# Altium integrated library conn 2.54mm.IntLib: 396 symbols (part 2 of 3)
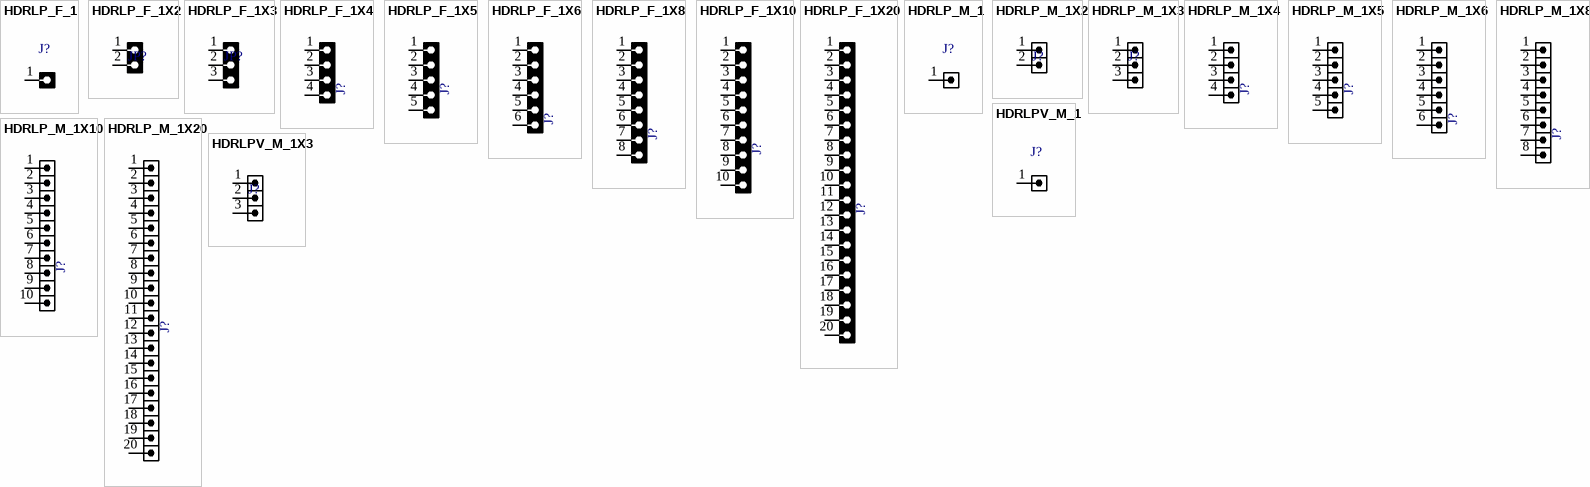
[diagram p13: symbols HDRLP_F_1 to HDRLPV_M_1X3]

## HDRLPV_M_1X3
designator J?, comment HDRM3  (value not drawn)
CONN, HEADER, VeryLowProfile, Male, pitch: 2.54mm, 3POS; VALUE: HDRM3
signal-integrity model Connector
footprint HDRLPV_M_1X3 (Connector Socket with header, Single-row 3-position, 0.100" pitch)
pins: 1, 2, 3


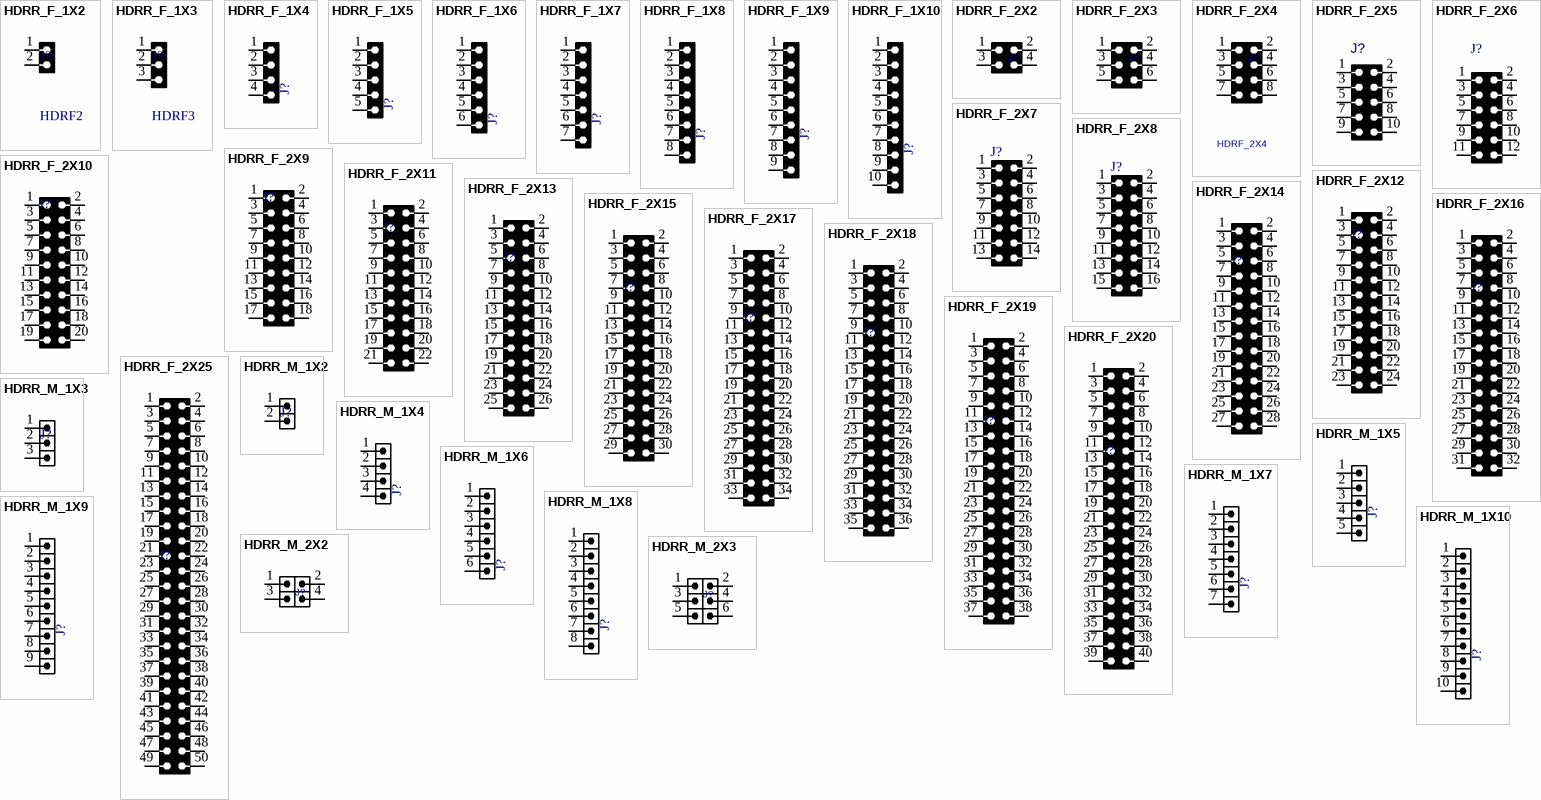
[diagram p5: symbols HDRR_F_1X2 to HDRR_M_2X3]

## HDRR_F_1X2
designator J?, comment HDRF2
CONN, HEADER, Female, pitch: 2.54mm, 2POS; VALUE: HDRF2
footprint HDRR_F_1X2 (Connector; Header; 2 Position; Right Angle)
pins: 1, 2

## HDRR_F_1X3
designator J?, comment HDRF3
CONN, HEADER, Female, pitch: 2.54mm, 3POS; VALUE: HDRF3
footprint HDRR_F_1X3 (Connector; Header; 3 Position; Right Angle)
pins: 1, 2, 3

## HDRR_F_1X4
designator J?, comment HDRF4  (value not drawn)
CONN, HEADER, Female, pitch: 2.54mm, 4POS; VALUE: HDRF4
footprint HDRR_F_1X4 (Connector; Header; 4 Position; Right Angle)
pins: 1, 2, 3, 4

## HDRR_F_1X5
designator J?, comment HDRF5  (value not drawn)
CONN, HEADER, Female, pitch: 2.54mm, 5POS; VALUE: HDRF5
footprint HDRR_F_1X5 (Connector; Header; 5 Position)
pins: 1, 2, 3, 4, 5

## HDRR_F_1X6
designator J?, comment HDRF6  (value not drawn)
CONN, HEADER, Female, pitch: 2.54mm, 6POS; VALUE: HDRF6
footprint HDRR_F_1X6 (Connector; Header; 6 Position)
pins: 1, 2, 3, 4, 5, 6

## HDRR_F_1X7
designator J?, comment HDRF7  (value not drawn)
CONN, HEADER, Female, pitch: 2.54mm, 7POS; VALUE: HDRF7
footprint HDRR_F_1X7 (Connector; Header; 7 Position)
pins: 1, 2, 3, 4, 5, 6, 7

## HDRR_F_1X8
designator J?, comment HDRF8  (value not drawn)
CONN, HEADER, Female, pitch: 2.54mm, 8POS; VALUE: HDRF8
footprint HDRR_F_1X8 (Connector; Header; 8 Position)
pins: 1, 2, 3, 4, 5, 6, 7, 8

## HDRR_F_1X9
designator J?, comment HDRF9  (value not drawn)
CONN, HEADER, Female, pitch: 2.54mm, 9POS; VALUE: HDRF9
footprint HDRR_F_1X9 (Connector; Header; 9 Position)
pins: 1, 2, 3, 4, 5, 6, 7, 8, 9

## HDRR_F_1X10
designator J?, comment HDRF10  (value not drawn)
CONN, HEADER, Female, pitch: 2.54mm, 10POS; VALUE: HDRF10
footprint HDRR_F_1X10 (Connector; Header; 10 Position)
pins: 1, 2, 3, 4, 5, 6, 7, 8, 9, 10

## HDRR_F_2X2
designator J?, comment HDRF_2X2  (value not drawn)
CONN, HEADER, RightAngle, Female, pitch: 2.54mm, 4POS; MANF_P#: MANF_PART#; MANF: MANF; VALUE: HDRF_2X2
footprint HDRR_F_2X2 (Connector; Header; 2x2 Position)
pins: 1, 2, 3, 4

## HDRR_F_2X3
designator J?, comment HDRF_2X3  (value not drawn)
CONN, HEADER, RightAngle, Female, pitch: 2.54mm, 6POS; MANF_P#: MANF_PART#; MANF: MANF; VALUE: HDRF_2X3
footprint HDRR_F_2X3 (Connector; Header; 3x2 Position)
pins: 1, 2, 3, 4, 5, 6

## HDRR_F_2X4
designator J?, comment HDRF_2X4
CONN, HEADER, RightAngle, Female, pitch: 2.54mm, 8POS; MANF_P#: MANF_PART#; MANF: MANF; VALUE: HDRF_2X4
footprint HDRR_F_2X4 (Connector; Header; 4x2 Position)
pins: 1, 2, 3, 4, 5, 6, 7, 8

## HDRR_F_2X5
designator J?, comment HDRF_2X5  (value not drawn)
CONN, HEADER, RightAngle, Female, pitch: 2.54mm, 10POS; VALUE: HDRF_2X5
footprint HDRR_F_2X5 (Connector; Header; 5x2 Position)
pins: 1, 2, 3, 4, 5, 6, 7, 8, 9, 10

## HDRR_F_2X6
designator J?, comment HDRF_2X7  (value not drawn)
CONN, HEADER, RightAngle, Female, pitch: 2.54mm, 14POS; VALUE: HDRF_2X7
footprint HDRR_F_2X7 (Connector; Header; 7x2 Position)
pins: 1, 2, 3, 4, 5, 6, 7, 8, 9, 10, 11, 12

## HDRR_F_2X7
designator J?, comment HDRF_2X7  (value not drawn)
CONN, HEADER, RightAngle, Female, pitch: 2.54mm, 14POS; VALUE: HDRF_2X7
footprint HDRR_F_2X7 (Connector; Header; 7x2 Position)
pins: 1, 2, 3, 4, 5, 6, 7, 8, 9, 10, 11, 12, 13, 14

## HDRR_F_2X8
designator J?, comment HDRF_2X8  (value not drawn)
CONN, HEADER, RightAngle, Female, pitch: 2.54mm, 16POS; VALUE: HDRF_2X8
footprint HDRR_F_2X8 (Connector; Header; 8x2 Position)
pins: 1, 2, 3, 4, 5, 6, 7, 8, 9, 10, 11, 12, 13, 14, 15, 16

## HDRR_F_2X9
designator J?, comment HDRF_2X9  (value not drawn)
CONN, HEADER, RightAngle, Female, pitch: 2.54mm, 18POS; VALUE: HDRF_2X9
footprint HDRR_F_2X9 (Connector; Header; 9x2 Position)
pins: 1, 2, 3, 4, 5, 6, 7, 8, 9, 10, 11, 12, 13, 14, 15, 16, 17, 18

## HDRR_F_2X10
designator J?, comment HDRF_2X10  (value not drawn)
CONN, HEADER, RightAngle, Female, pitch: 2.54mm, 20POS; VALUE: HDRF_2X10
footprint HDRR_F_2X10 (Connector; Header; 10x2 Position)
pins: 1, 2, 3, 4, 5, 6, 7, 8, 9, 10, 11, 12, 13, 14, 15, 16, 17, 18, 19, 20

## HDRR_F_2X11
designator J?, comment HDRF_2X11  (value not drawn)
CONN, HEADER, RightAngle, Female, pitch: 2.54mm, 22POS; VALUE: HDRF_2X11
footprint HDRR_F_2X11 (Connector; Header; 11x2 Position)
pins: 1, 2, 3, 4, 5, 6, 7, 8, 9, 10, 11, 12, 13, 14, 15, 16, 17, 18, 19, 20, 21, 22

## HDRR_F_2X12
designator J?, comment HDRF_2X12  (value not drawn)
CONN, HEADER, RightAngle, Female, pitch: 2.54mm, 24POS; VALUE: HDRF_2X12
footprint HDRR_F_2X12 (Connector; Header; 12x2 Position)
pins: 1, 2, 3, 4, 5, 6, 7, 8, 9, 10, 11, 12, 13, 14, 15, 16, 17, 18, 19, 20, 21, 22, 23, 24

## HDRR_F_2X13
designator J?, comment HDRF_2X13  (value not drawn)
CONN, HEADER, RightAngle, Female, pitch: 2.54mm, 26POS; VALUE: HDRF_2X13
footprint HDRR_F_2X13 (Connector; Header; 13x2 Position)
pins: 1, 2, 3, 4, 5, 6, 7, 8, 9, 10, 11, 12, 13, 14, 15, 16, 17, 18, 19, 20, 21, 22, 23, 24, 25, 26

## HDRR_F_2X14
designator J?, comment HDRF_2X14  (value not drawn)
CONN, HEADER, RightAngle, Female, pitch: 2.54mm, 28POS; VALUE: HDRF_2X14
footprint HDRR_F_2X14 (Connector; Header; 14x2 Position)
pins: 1, 2, 3, 4, 5, 6, 7, 8, 9, 10, 11, 12, 13, 14, 15, 16, 17, 18, 19, 20, 21, 22, 23, 24, 25, 26, 27, 28

## HDRR_F_2X15
designator J?, comment HDRF_2X15  (value not drawn)
CONN, HEADER, RightAngle, Female, pitch: 2.54mm, 30POS; VALUE: HDRF_2X15
footprint HDRR_F_2X15 (Connector; Header; 15x2 Position)
pins: 1, 2, 3, 4, 5, 6, 7, 8, 9, 10, 11, 12, 13, 14, 15, 16, 17, 18, 19, 20, 21, 22, 23, 24, 25, 26, 27, 28, 29, 30

## HDRR_F_2X16
designator J?, comment HDRF_2X16  (value not drawn)
CONN, HEADER, RightAngle, Female, pitch: 2.54mm, 32POS; VALUE: HDRF_2X16
footprint HDRR_F_2X16 (Connector; Header; 16x2 Position)
pins: 1, 2, 3, 4, 5, 6, 7, 8, 9, 10, 11, 12, 13, 14, 15, 16, 17, 18, 19, 20, 21, 22, 23, 24, 25, 26, 27, 28, 29, 30, 31, 32

## HDRR_F_2X17
designator J?, comment HDRF_2X17  (value not drawn)
CONN, HEADER, RightAngle, Female, pitch: 2.54mm, 34POS; VALUE: HDRF_2X17
footprint HDRR_F_2X17 (Connector; Header; 17x2 Position)
pins: 1, 2, 3, 4, 5, 6, 7, 8, 9, 10, 11, 12, 13, 14, 15, 16, 17, 18, 19, 20, 21, 22, 23, 24, 25, 26, 27, 28, 29, 30, 31, 32, 33, 34

## HDRR_F_2X18
designator J?, comment HDRF_2X18  (value not drawn)
CONN, HEADER, RightAngle, Female, pitch: 2.54mm, 36POS; VALUE: HDRF_2X18
footprint HDRR_F_2X18 (Connector; Header; 18x2 Position)
pins: 1, 2, 3, 4, 5, 6, 7, 8, 9, 10, 11, 12, 13, 14, 15, 16, 17, 18, 19, 20, 21, 22, 23, 24, 25, 26, 27, 28, 29, 30, 31, 32, 33, 34, 35, 36

## HDRR_F_2X19
designator J?, comment HDRF_2X19  (value not drawn)
CONN, HEADER, RightAngle, Female, pitch: 2.54mm, 38POS; VALUE: HDRF_2X19
footprint HDRR_F_2X19 (Connector; Header; 19x2 Position)
pins: 1, 2, 3, 4, 5, 6, 7, 8, 9, 10, 11, 12, 13, 14, 15, 16, 17, 18, 19, 20, 21, 22, 23, 24, 25, 26, 27, 28, 29, 30, 31, 32, 33, 34, 35, 36, 37, 38

## HDRR_F_2X20
designator J?, comment HDRF_2X20  (value not drawn)
CONN, HEADER, RightAngle, Female, pitch: 2.54mm, 40POS; VALUE: HDRF_2X20
footprint HDRR_F_2X20 (Connector; Header; 20x2 Position)
pins: 1, 2, 3, 4, 5, 6, 7, 8, 9, 10, 11, 12, 13, 14, 15, 16, 17, 18, 19, 20, 21, 22, 23, 24, 25, 26, 27, 28, 29, 30, 31, 32, 33, 34, 35, 36, 37, 38, 39, 40

## HDRR_F_2X25
designator J?, comment HDRF_2X25  (value not drawn)
CONN, HEADER, Female, pitch: 2.54mm, 50POS; VALUE: HDRF_2X25
footprint HDRR_F_2X25 (Connector; Header; 25x2 Position)
pins: 1, 2, 3, 4, 5, 6, 7, 8, 9, 10, 11, 12, 13, 14, 15, 16, 17, 18, 19, 20, 21, 22, 23, 24, 25, 26, 27, 28, 29, 30, 31, 32, 33, 34, 35, 36, 37, 38, 39, 40, 41, 42, 43, 44, 45, 46, 47, 48, 49, 50

## HDRR_M_1X2
designator J?, comment HDRM2  (value not drawn)
CONN, HEADER, RightAngle, Male, pitch: 2.54mm, 2POS; VALUE: HDRM2
footprint HDRR_M_1X2 (Connector; Header; 2 Position; Right Angle)
pins: 1, 2

## HDRR_M_1X3
designator J?, comment HDRM3  (value not drawn)
CONN, HEADER, RightAngle, Male, pitch: 2.54mm, 3POS; VALUE: HDRM3
footprint HDRR_M_1X3 (Connector; Header; 3 Position; Right Angle)
pins: 1, 2, 3

## HDRR_M_1X4
designator J?, comment HDR1X4  (value not drawn)
CONN, HEADER, RightAngle, Male, pitch: 2.54mm, 4POS; VALUE: HDRM4
footprint HDRR_M_1X4 (Connector; Header; 4 Position; Right Angle)
pins: 1, 2, 3, 4

## HDRR_M_1X5
designator J?, comment HDR1X5  (value not drawn)
CONN, HEADER, RightAngle, Male, pitch: 2.54mm, 5POS; VALUE: HDRM5
footprint HDRR_M_1X5 (Footprint not found)
pins: 1, 2, 3, 4, 5

## HDRR_M_1X6
designator J?, comment HDR1X6  (value not drawn)
CONN, HEADER, RightAngle, Male, pitch: 2.54mm, 6POS; VALUE: HDRM6
footprint HDRR_M_1X6 (Footprint not found)
pins: 1, 2, 3, 4, 5, 6

## HDRR_M_1X7
designator J?, comment HDR1X7  (value not drawn)
CONN, HEADER, RightAngle, Male, pitch: 2.54mm, 7POS; VALUE: HDRM7
footprint HDRR_M_1X7 (Footprint not found)
pins: 1, 2, 3, 4, 5, 6, 7

## HDRR_M_1X8
designator J?, comment HDR1X8  (value not drawn)
CONN, HEADER, RightAngle, Male, pitch: 2.54mm, 8POS; VALUE: HDRM8
footprint HDRR_M_1X8 (Footprint not found)
pins: 1, 2, 3, 4, 5, 6, 7, 8

## HDRR_M_1X9
designator J?, comment HDR1X9  (value not drawn)
CONN, HEADER, RightAngle, Male, pitch: 2.54mm, 9POS; VALUE: HDRM9
footprint HDRR_M_1X9 (Footprint not found)
pins: 1, 2, 3, 4, 5, 6, 7, 8, 9

## HDRR_M_1X10
designator J?, comment HDR1X10  (value not drawn)
CONN, HEADER, RightAngle, Male, pitch: 2.54mm, 10POS; VALUE: HDRM10
footprint HDRR_M_1X10 (Footprint not found)
pins: 1, 2, 3, 4, 5, 6, 7, 8, 9, 10

## HDRR_M_2X2
designator J?, comment HDRM_2X2  (value not drawn)
CONN, HEADER, RightAngle, Male, pitch: 2.54mm, 4POS; MANF_P#: MANF_PART#; MANF: MANF; VALUE: HDRM_2X2
footprint HDRR_M_2X2 (Connector; Header; 2x2 Position)
pins: 1, 2, 3, 4

## HDRR_M_2X3
designator J?, comment HDRM_2X3  (value not drawn)
CONN, HEADER, RightAngle, Male, pitch: 2.54mm, 6POS; MANF_P#: MANF_PART#; MANF: MANF; VALUE: HDRM_2X3
footprint HDRR_M_2X3 (Connector; Header; 3x2 Position)
pins: 1, 2, 3, 4, 5, 6

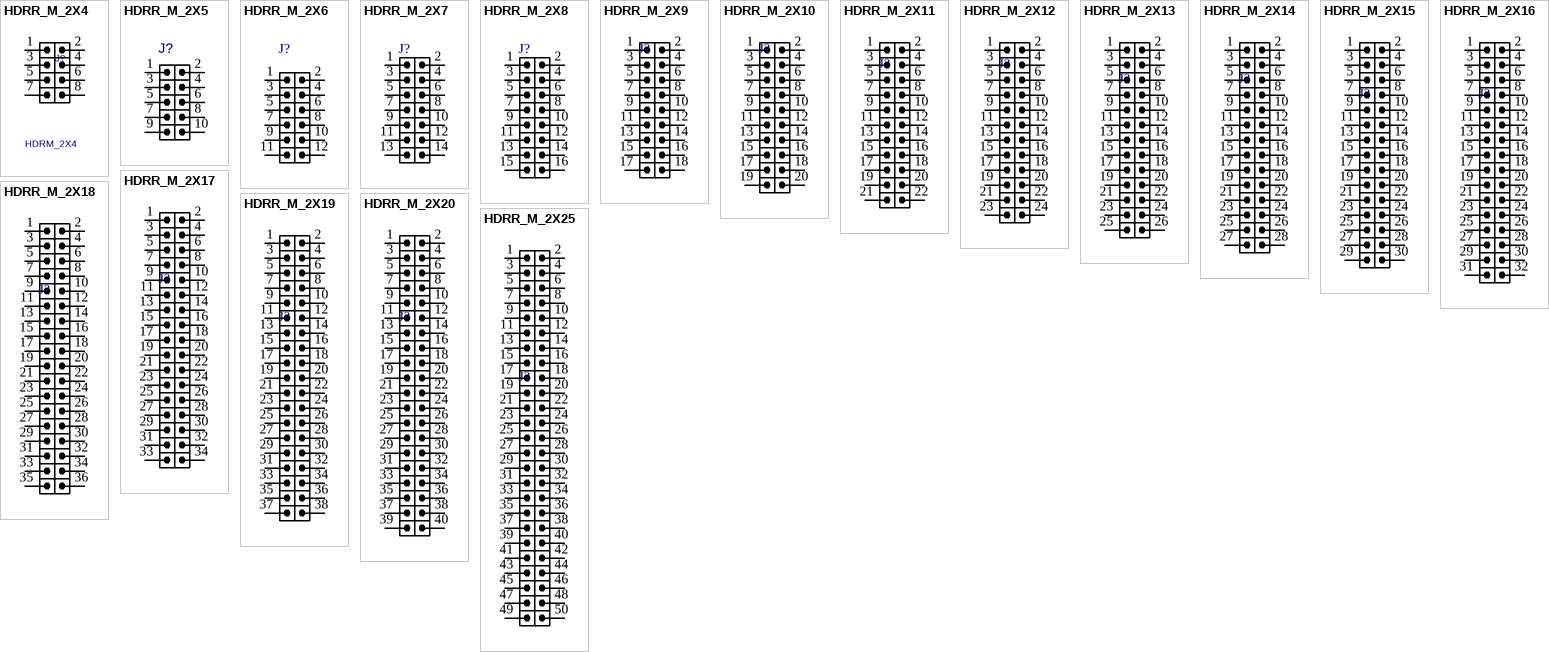
[diagram p6: symbols HDRR_M_2X4 to HDRR_M_2X25]

## HDRR_M_2X4
designator J?, comment HDRM_2X4
CONN, HEADER, RightAngle, Male, pitch: 2.54mm, 8POS; MANF_P#: MANF_PART#; MANF: MANF; VALUE: HDRM_2X4
footprint HDRR_M_2X4 (Connector; Header; 4x2 Position)
pins: 1, 2, 3, 4, 5, 6, 7, 8

## HDRR_M_2X5
designator J?, comment HDRM_2X5  (value not drawn)
CONN, HEADER, RightAngle, Male, pitch: 2.54mm, 10POS; VALUE: HDRM_2X5
footprint HDRR_M_2X5 (Connector; Header; 5x2 Position)
pins: 1, 2, 3, 4, 5, 6, 7, 8, 9, 10

## HDRR_M_2X6
designator J?, comment HDRM_2X7  (value not drawn)
CONN, HEADER, RightAngle, Male, pitch: 2.54mm, 14POS; VALUE: HDRM_2X7
footprint HDRR_M_2X7 (Connector; Header; 7x2 Position)
pins: 1, 2, 3, 4, 5, 6, 7, 8, 9, 10, 11, 12

## HDRR_M_2X7
designator J?, comment HDRM_2X7  (value not drawn)
CONN, HEADER, RightAngle, Male, pitch: 2.54mm, 14POS; VALUE: HDRM_2X7
footprint HDRR_M_2X7 (Connector; Header; 7x2 Position)
pins: 1, 2, 3, 4, 5, 6, 7, 8, 9, 10, 11, 12, 13, 14

## HDRR_M_2X8
designator J?, comment HDRM_2X8  (value not drawn)
CONN, HEADER, RightAngle, Male, pitch: 2.54mm, 16POS; VALUE: HDRM_2X8
footprint HDRR_M_2X8 (Connector; Header; 8x2 Position)
pins: 1, 2, 3, 4, 5, 6, 7, 8, 9, 10, 11, 12, 13, 14, 15, 16

## HDRR_M_2X9
designator J?, comment HDRM_2X9  (value not drawn)
CONN, HEADER, RightAngle, Male, pitch: 2.54mm, 18POS; VALUE: HDRM_2X9
footprint HDRR_M_2X9 (Connector; Header; 9x2 Position)
pins: 1, 2, 3, 4, 5, 6, 7, 8, 9, 10, 11, 12, 13, 14, 15, 16, 17, 18

## HDRR_M_2X10
designator J?, comment HDRM_2X10  (value not drawn)
CONN, HEADER, RightAngle, Male, pitch: 2.54mm, 20POS; VALUE: HDRM_2X10
footprint HDRR_M_2X10 (Connector; Header; 10x2 Position)
pins: 1, 2, 3, 4, 5, 6, 7, 8, 9, 10, 11, 12, 13, 14, 15, 16, 17, 18, 19, 20

## HDRR_M_2X11
designator J?, comment HDRM_2X11  (value not drawn)
CONN, HEADER, RightAngle, Male, pitch: 2.54mm, 22POS; VALUE: HDRM_2X11
footprint HDRR_M_2X11 (Connector; Header; 11x2 Position)
pins: 1, 2, 3, 4, 5, 6, 7, 8, 9, 10, 11, 12, 13, 14, 15, 16, 17, 18, 19, 20, 21, 22

## HDRR_M_2X12
designator J?, comment HDRM_2X12  (value not drawn)
CONN, HEADER, RightAngle, Male, pitch: 2.54mm, 24POS; VALUE: HDRM_2X12
footprint HDRR_M_2X12 (Connector; Header; 12x2 Position)
pins: 1, 2, 3, 4, 5, 6, 7, 8, 9, 10, 11, 12, 13, 14, 15, 16, 17, 18, 19, 20, 21, 22, 23, 24

## HDRR_M_2X13
designator J?, comment HDRM_2X13  (value not drawn)
CONN, HEADER, RightAngle, Male, pitch: 2.54mm, 26POS; VALUE: HDRM_2X13
footprint HDRR_M_2X13 (Connector; Header; 13x2 Position)
pins: 1, 2, 3, 4, 5, 6, 7, 8, 9, 10, 11, 12, 13, 14, 15, 16, 17, 18, 19, 20, 21, 22, 23, 24, 25, 26

## HDRR_M_2X14
designator J?, comment HDRM_2X14  (value not drawn)
CONN, HEADER, RightAngle, Male, pitch: 2.54mm, 28POS; VALUE: HDRM_2X14
footprint HDRR_M_2X14 (Connector; Header; 14x2 Position)
pins: 1, 2, 3, 4, 5, 6, 7, 8, 9, 10, 11, 12, 13, 14, 15, 16, 17, 18, 19, 20, 21, 22, 23, 24, 25, 26, 27, 28

## HDRR_M_2X15
designator J?, comment HDRM_2X15  (value not drawn)
CONN, HEADER, RightAngle, Male, pitch: 2.54mm, 30POS; VALUE: HDRM_2X15
footprint HDRR_M_2X15 (Connector; Header; 15x2 Position)
pins: 1, 2, 3, 4, 5, 6, 7, 8, 9, 10, 11, 12, 13, 14, 15, 16, 17, 18, 19, 20, 21, 22, 23, 24, 25, 26, 27, 28, 29, 30

## HDRR_M_2X16
designator J?, comment HDRM_2X16  (value not drawn)
CONN, HEADER, RightAngle, Male, pitch: 2.54mm, 32POS; VALUE: HDRM_2X16
footprint HDRR_M_2X16 (Connector; Header; 16x2 Position)
pins: 1, 2, 3, 4, 5, 6, 7, 8, 9, 10, 11, 12, 13, 14, 15, 16, 17, 18, 19, 20, 21, 22, 23, 24, 25, 26, 27, 28, 29, 30, 31, 32

## HDRR_M_2X17
designator J?, comment HDRM_2X17  (value not drawn)
CONN, HEADER, RightAngle, Male, pitch: 2.54mm, 34POS; VALUE: HDRM_2X17
footprint HDRR_M_2X17 (Connector; Header; 17x2 Position)
pins: 1, 2, 3, 4, 5, 6, 7, 8, 9, 10, 11, 12, 13, 14, 15, 16, 17, 18, 19, 20, 21, 22, 23, 24, 25, 26, 27, 28, 29, 30, 31, 32, 33, 34

## HDRR_M_2X18
designator J?, comment HDRM_2X18  (value not drawn)
CONN, HEADER, RightAngle, Male, pitch: 2.54mm, 36POS; VALUE: HDRM_2X18
footprint HDRR_M_2X18 (Connector; Header; 18x2 Position)
pins: 1, 2, 3, 4, 5, 6, 7, 8, 9, 10, 11, 12, 13, 14, 15, 16, 17, 18, 19, 20, 21, 22, 23, 24, 25, 26, 27, 28, 29, 30, 31, 32, 33, 34, 35, 36

## HDRR_M_2X19
designator J?, comment HDRM_2X19  (value not drawn)
CONN, HEADER, RightAngle, Male, pitch: 2.54mm, 38POS; VALUE: HDRM_2X19
footprint HDRR_M_2X19 (Connector; Header; 19x2 Position)
pins: 1, 2, 3, 4, 5, 6, 7, 8, 9, 10, 11, 12, 13, 14, 15, 16, 17, 18, 19, 20, 21, 22, 23, 24, 25, 26, 27, 28, 29, 30, 31, 32, 33, 34, 35, 36, 37, 38

## HDRR_M_2X20
designator J?, comment HDRM_2X20  (value not drawn)
CONN, HEADER, RightAngle, Male, pitch: 2.54mm, 40POS; VALUE: HDRM_2X20
footprint HDRR_M_2X20 (Connector; Header; 20x2 Position)
pins: 1, 2, 3, 4, 5, 6, 7, 8, 9, 10, 11, 12, 13, 14, 15, 16, 17, 18, 19, 20, 21, 22, 23, 24, 25, 26, 27, 28, 29, 30, 31, 32, 33, 34, 35, 36, 37, 38, 39, 40

## HDRR_M_2X25
designator J?, comment HDRM_2X25  (value not drawn)
CONN, HEADER, RightAngle, Male, pitch: 2.54mm, 50POS; VALUE: HDRM_2X25
footprint HDRR_M_2X25 (Footprint not found)
pins: 1, 2, 3, 4, 5, 6, 7, 8, 9, 10, 11, 12, 13, 14, 15, 16, 17, 18, 19, 20, 21, 22, 23, 24, 25, 26, 27, 28, 29, 30, 31, 32, 33, 34, 35, 36, 37, 38, 39 38, 40 39, 41 39, 42 40, 43 40, 44 41, 45 41, 46 42, 47 42, 48 43, 49 43, 50 44


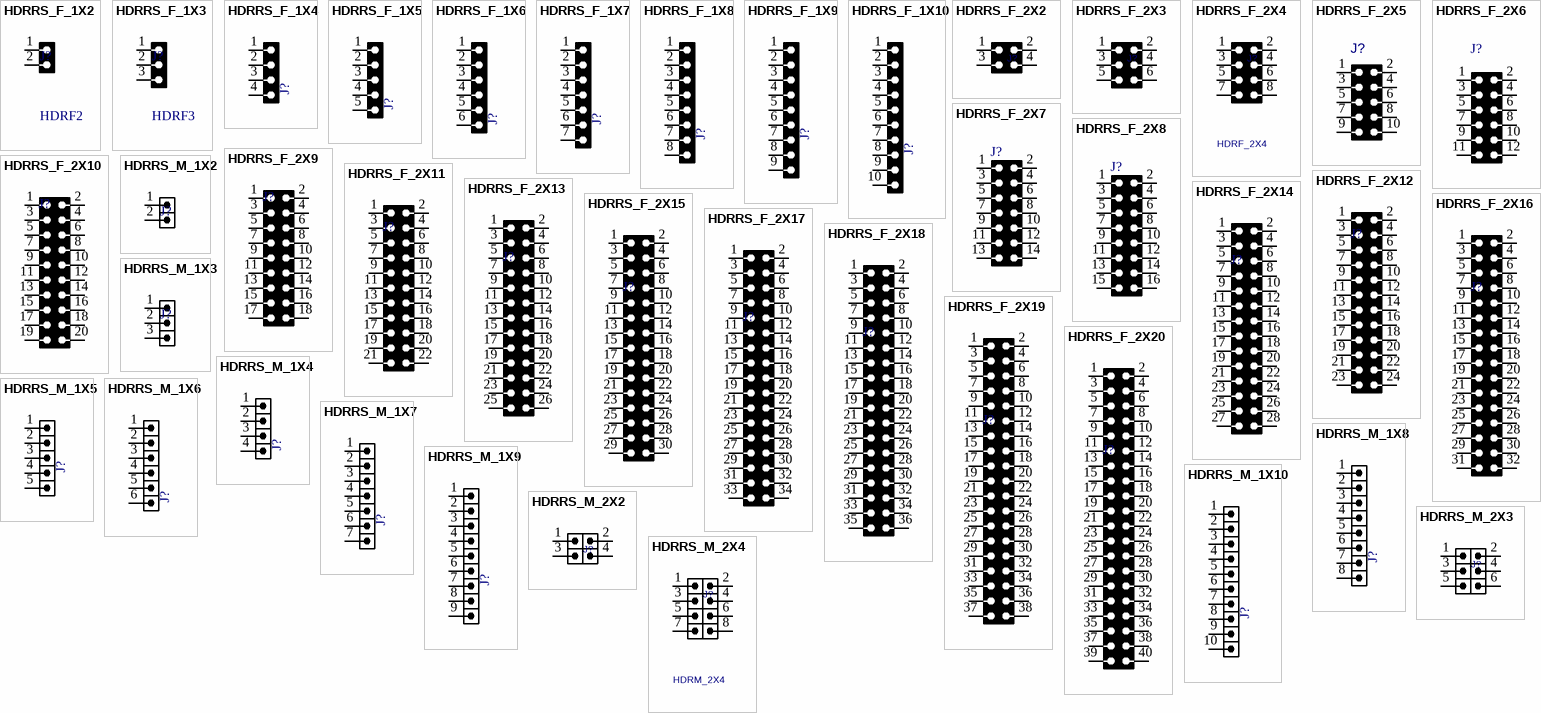
[diagram p7: symbols HDRRS_F_1X2 to HDRRS_M_2X4]

## HDRRS_F_1X2
designator J?, comment HDRF2
CONN, HEADER, Female, pitch: 2.54mm, 2POS; VALUE: HDRF2
footprint HDRRS_F_1X2 (Connector; Header; 2 Position, SMD edge)
pins: 1, 2

## HDRRS_F_1X3
designator J?, comment HDRF3
CONN, HEADER, Female, pitch: 2.54mm, 3POS; VALUE: HDRF3
footprint HDRRS_F_1X3 (Connector; Header; 3 Position)
pins: 1, 2, 3

## HDRRS_F_1X4
designator J?, comment HDRF4  (value not drawn)
CONN, HEADER, Female, pitch: 2.54mm, 4POS; VALUE: HDRF4
footprint HDRRS_F_1X4 (Connector; Header; 4 Position)
pins: 1, 2, 3, 4

## HDRRS_F_1X5
designator J?, comment HDRF5  (value not drawn)
CONN, HEADER, Female, pitch: 2.54mm, 5POS; VALUE: HDRF5
footprint HDRRS_F_1X5 (Connector; Header; 5 Position)
pins: 1, 2, 3, 4, 5

## HDRRS_F_1X6
designator J?, comment HDRF6  (value not drawn)
CONN, HEADER, Female, pitch: 2.54mm, 6POS; VALUE: HDRF6
footprint HDRRS_F_1X6 (Connector; Header; 6 Position)
pins: 1, 2, 3, 4, 5, 6

## HDRRS_F_1X7
designator J?, comment HDRF7  (value not drawn)
CONN, HEADER, Female, pitch: 2.54mm, 7POS; VALUE: HDRF7
footprint HDRRS_F_1X7 (Connector; Header; 7 Position)
pins: 1, 2, 3, 4, 5, 6, 7

## HDRRS_F_1X8
designator J?, comment HDRF8  (value not drawn)
CONN, HEADER, Female, pitch: 2.54mm, 8POS; VALUE: HDRF8
footprint HDRRS_F_1X8 (Connector; Header; 8 Position)
pins: 1, 2, 3, 4, 5, 6, 7, 8

## HDRRS_F_1X9
designator J?, comment HDRF9  (value not drawn)
CONN, HEADER, Female, pitch: 2.54mm, 9POS; VALUE: HDRF9
footprint HDRRS_F_1X9 (Connector; Header; 9 Position)
pins: 1, 2, 3, 4, 5, 6, 7, 8, 9

## HDRRS_F_1X10
designator J?, comment HDRF10  (value not drawn)
CONN, HEADER, Female, pitch: 2.54mm, 10POS; VALUE: HDRF10
footprint HDRRS_F_1X10 (Connector; Header; 10 Position)
pins: 1, 2, 3, 4, 5, 6, 7, 8, 9, 10

## HDRRS_F_2X2
designator J?, comment HDRF_2X2  (value not drawn)
CONN, HEADER, Female, pitch: 2.54mm, 4POS; MANF_P#: MANF_PART#; MANF: MANF; VALUE: HDRF_2X2
footprint HDRRS_F_2X2 (HEADER, 2.54mm, 2 Rows, Right Angle, Female, SMD)
pins: 1, 2, 3, 4

## HDRRS_F_2X3
designator J?, comment HDRF_2X3  (value not drawn)
CONN, HEADER, Female, pitch: 2.54mm, 6POS; MANF_P#: MANF_PART#; MANF: MANF; VALUE: HDRF_2X3
footprint HDRRS_F_2X3 (HEADER, 2.54mm, 2 Rows, Right Angle, Female, SMD)
pins: 1, 2, 3, 4, 5, 6

## HDRRS_F_2X4
designator J?, comment HDRF_2X4
CONN, HEADER, Female, pitch: 2.54mm, 8POS; MANF_P#: MANF_PART#; MANF: MANF; VALUE: HDRF_2X4
footprint HDRRS_F_2X4 (HEADER, 2.54mm, 2 Rows, Right Angle, Female, SMD)
pins: 1, 2, 3, 4, 5, 6, 7, 8

## HDRRS_F_2X5
designator J?, comment HDRF_2X5  (value not drawn)
CONN, HEADER, Female, pitch: 2.54mm, 10POS; VALUE: HDRF_2X5
footprint HDRRS_F_2X5 (HEADER, 2.54mm, 2 Rows, Right Angle, Female, SMD)
pins: 1, 2, 3, 4, 5, 6, 7, 8, 9, 10

## HDRRS_F_2X6
designator J?, comment HDRF_2X6  (value not drawn)
CONN, HEADER, Female, pitch: 2.54mm, 12POS; VALUE: HDRF_2X6
footprint HDRRS_F_2X6 (HEADER, 2.54mm, 2 Rows, Right Angle, Female, SMD)
pins: 1, 2, 3, 4, 5, 6, 7, 8, 9, 10, 11, 12

## HDRRS_F_2X7
designator J?, comment HDRF_2X7  (value not drawn)
CONN, HEADER, Female, pitch: 2.54mm, 14POS; VALUE: HDRF_2X7
footprint HDRRS_F_2X7 (HEADER, 2.54mm, 2 Rows, Right Angle, Female, SMD)
pins: 1, 2, 3, 4, 5, 6, 7, 8, 9, 10, 11, 12, 13, 14

## HDRRS_F_2X8
designator J?, comment HDRF_2X8  (value not drawn)
CONN, HEADER, Female, pitch: 2.54mm, 16POS; VALUE: HDRF_2X8
footprint HDRRS_F_2X8 (HEADER, 2.54mm, 2 Rows, Right Angle, Female, SMD)
pins: 1, 2, 3, 4, 5, 6, 7, 8, 9, 10, 11, 12, 13, 14, 15, 16

## HDRRS_F_2X9
designator J?, comment HDRF_2X9  (value not drawn)
CONN, HEADER, Female, pitch: 2.54mm, 18POS; VALUE: HDRF_2X9
footprint HDRRS_F_2X9 (HEADER, 2.54mm, 2 Rows, Right Angle, Female, SMD)
pins: 1, 2, 3, 4, 5, 6, 7, 8, 9, 10, 11, 12, 13, 14, 15, 16, 17, 18

## HDRRS_F_2X10
designator J?, comment HDRF_2X10  (value not drawn)
CONN, HEADER, Female, pitch: 2.54mm, 20POS; VALUE: HDRF_2X10
footprint HDRRS_F_2X10 (HEADER, 2.54mm, 2 Rows, Right Angle, Female, SMD)
pins: 1, 2, 3, 4, 5, 6, 7, 8, 9, 10, 11, 12, 13, 14, 15, 16, 17, 18, 19, 20

## HDRRS_F_2X11
designator J?, comment HDRF_2X11  (value not drawn)
CONN, HEADER, Female, pitch: 2.54mm, 22POS; VALUE: HDRF_2X11
footprint HDRRS_F_2X11 (HEADER, 2.54mm, 2 Rows, Right Angle, Female, SMD)
pins: 1, 2, 3, 4, 5, 6, 7, 8, 9, 10, 11, 12, 13, 14, 15, 16, 17, 18, 19, 20, 21, 22

## HDRRS_F_2X12
designator J?, comment HDRF_2X12  (value not drawn)
CONN, HEADER, Female, pitch: 2.54mm, 24POS; VALUE: HDRF_2X12
footprint HDRRS_F_2X12 (HEADER, 2.54mm, 2 Rows, Right Angle, Female, SMD)
pins: 1, 2, 3, 4, 5, 6, 7, 8, 9, 10, 11, 12, 13, 14, 15, 16, 17, 18, 19, 20, 21, 22, 23, 24

## HDRRS_F_2X13
designator J?, comment HDRF_2X13  (value not drawn)
CONN, HEADER, Female, pitch: 2.54mm, 26POS; VALUE: HDRF_2X13
footprint HDRRS_F_2X13 (HEADER, 2.54mm, 2 Rows, Right Angle, Female, SMD)
pins: 1, 2, 3, 4, 5, 6, 7, 8, 9, 10, 11, 12, 13, 14, 15, 16, 17, 18, 19, 20, 21, 22, 23, 24, 25, 26

## HDRRS_F_2X14
designator J?, comment HDRF_2X14  (value not drawn)
CONN, HEADER, Female, pitch: 2.54mm, 28POS; VALUE: HDRF_2X14
footprint HDRRS_F_2X14 (HEADER, 2.54mm, 2 Rows, Right Angle, Female, SMD)
pins: 1, 2, 3, 4, 5, 6, 7, 8, 9, 10, 11, 12, 13, 14, 15, 16, 17, 18, 19, 20, 21, 22, 23, 24, 25, 26, 27, 28

## HDRRS_F_2X15
designator J?, comment HDRF_2X15  (value not drawn)
CONN, HEADER, Female, pitch: 2.54mm, 30POS; VALUE: HDRF_2X15
footprint HDRRS_F_2X15 (HEADER, 2.54mm, 2 Rows, Right Angle, Female, SMD)
pins: 1, 2, 3, 4, 5, 6, 7, 8, 9, 10, 11, 12, 13, 14, 15, 16, 17, 18, 19, 20, 21, 22, 23, 24, 25, 26, 27, 28, 29, 30

## HDRRS_F_2X16
designator J?, comment HDRF_2X16  (value not drawn)
CONN, HEADER, Female, pitch: 2.54mm, 32POS; VALUE: HDRF_2X16
footprint HDRRS_F_2X16 (HEADER, 2.54mm, 2 Rows, Right Angle, Female, SMD)
pins: 1, 2, 3, 4, 5, 6, 7, 8, 9, 10, 11, 12, 13, 14, 15, 16, 17, 18, 19, 20, 21, 22, 23, 24, 25, 26, 27, 28, 29, 30, 31, 32

## HDRRS_F_2X17
designator J?, comment HDRF_2X17  (value not drawn)
CONN, HEADER, Female, pitch: 2.54mm, 34POS; VALUE: HDRF_2X17
footprint HDRRS_F_2X17 (HEADER, 2.54mm, 2 Rows, Right Angle, Female, SMD)
pins: 1, 2, 3, 4, 5, 6, 7, 8, 9, 10, 11, 12, 13, 14, 15, 16, 17, 18, 19, 20, 21, 22, 23, 24, 25, 26, 27, 28, 29, 30, 31, 32, 33, 34

## HDRRS_F_2X18
designator J?, comment HDRF_2X18  (value not drawn)
CONN, HEADER, Female, pitch: 2.54mm, 36POS; VALUE: HDRF_2X18
footprint HDRRS_F_2X18 (HEADER, 2.54mm, 2 Rows, Right Angle, Female, SMD)
pins: 1, 2, 3, 4, 5, 6, 7, 8, 9, 10, 11, 12, 13, 14, 15, 16, 17, 18, 19, 20, 21, 22, 23, 24, 25, 26, 27, 28, 29, 30, 31, 32, 33, 34, 35, 36

## HDRRS_F_2X19
designator J?, comment HDRF_2X19  (value not drawn)
CONN, HEADER, Female, pitch: 2.54mm, 38POS; VALUE: HDRF_2X19
footprint HDRRS_F_2X19 (HEADER, 2.54mm, 2 Rows, Right Angle, Female, SMD)
pins: 1, 2, 3, 4, 5, 6, 7, 8, 9, 10, 11, 12, 13, 14, 15, 16, 17, 18, 19, 20, 21, 22, 23, 24, 25, 26, 27, 28, 29, 30, 31, 32, 33, 34, 35, 36, 37, 38

## HDRRS_F_2X20
designator J?, comment HDRF_2X20  (value not drawn)
CONN, HEADER, Female, pitch: 2.54mm, 40POS; VALUE: HDRF_2X20
footprint HDRRS_F_2X20 (HEADER, 2.54mm, 2 Rows, Right Angle, Female, SMD)
pins: 1, 2, 3, 4, 5, 6, 7, 8, 9, 10, 11, 12, 13, 14, 15, 16, 17, 18, 19, 20, 21, 22, 23, 24, 25, 26, 27, 28, 29, 30, 31, 32, 33, 34, 35, 36, 37, 38, 39, 40

## HDRRS_M_1X2
designator J?, comment HDRM2  (value not drawn)
CONN, HEADER, Male, pitch: 2.54mm, 2POS; VALUE: HDRM2
footprint HDRRS_M_1X2 (Connector; Header; 2 Position, SMD edge)
pins: 1, 2

## HDRRS_M_1X3
designator J?, comment HDRM3  (value not drawn)
CONN, HEADER, Male, pitch: 2.54mm, 3POS; VALUE: HDRM3
footprint HDRRS_M_1X3 (Connector; Header; 3 Position)
pins: 1, 2, 3

## HDRRS_M_1X4
designator J?, comment HDR1X4  (value not drawn)
CONN, HEADER, Male, pitch: 2.54mm, 4POS; VALUE: HDRM4
footprint HDRRS_M_1X4 (Connector; Header; 4 Position)
pins: 1, 2, 3, 4

## HDRRS_M_1X5
designator J?, comment HDR1X5  (value not drawn)
CONN, HEADER, Male, pitch: 2.54mm, 5POS; VALUE: HDRM5
footprint HDRRS_M_1X5 (Connector; Header; 5 Position)
pins: 1, 2, 3, 4, 5

## HDRRS_M_1X6
designator J?, comment HDR1X6  (value not drawn)
CONN, HEADER, Male, pitch: 2.54mm, 6POS; VALUE: HDRM6
footprint HDRRS_M_1X6 (Connector; Header; 6 Position)
pins: 1, 2, 3, 4, 5, 6

## HDRRS_M_1X7
designator J?, comment HDR1X7  (value not drawn)
CONN, HEADER, Male, pitch: 2.54mm, 7POS; VALUE: HDRM7
footprint HDRRS_M_1X7 (Connector; Header; 7 Position)
pins: 1, 2, 3, 4, 5, 6, 7

## HDRRS_M_1X8
designator J?, comment HDR1X8  (value not drawn)
CONN, HEADER, Male, pitch: 2.54mm, 8POS; VALUE: HDRM8
footprint HDRRS_M_1X8 (Connector; Header; 8 Position)
pins: 1, 2, 3, 4, 5, 6, 7, 8

## HDRRS_M_1X9
designator J?, comment HDR1X9  (value not drawn)
CONN, HEADER, Male, pitch: 2.54mm, 9POS; VALUE: HDRM9
footprint HDRRS_M_1X9 (Connector; Header; 9 Position)
pins: 1, 2, 3, 4, 5, 6, 7, 8, 9

## HDRRS_M_1X10
designator J?, comment HDR1X10  (value not drawn)
CONN, HEADER, Male, pitch: 2.54mm, 10POS; VALUE: HDRM10
footprint HDRRS_M_1X10 (Connector; Header; 10 Position)
pins: 1, 2, 3, 4, 5, 6, 7, 8, 9, 10

## HDRRS_M_2X2
designator J?, comment HDRM_2X2  (value not drawn)
CONN, HEADER, Male, pitch: 2.54mm, 4POS; MANF_P#: MANF_PART#; MANF: MANF; VALUE: HDRM_2X2
footprint HDRRS_M_2X2 (HEADER, 2.54mm, 2 Rows, Right Angle, Male, SMD)
pins: 1, 2, 3, 4

## HDRRS_M_2X3
designator J?, comment HDRM_2X3  (value not drawn)
CONN, HEADER, Male, pitch: 2.54mm, 6POS; MANF_P#: MANF_PART#; MANF: MANF; VALUE: HDRM_2X3
footprint HDRRS_M_2X3 (HEADER, 2.54mm, 2 Rows, Right Angle, Male, SMD)
pins: 1, 2, 3, 4, 5, 6

## HDRRS_M_2X4
designator J?, comment HDRM_2X4
CONN, HEADER, Male, pitch: 2.54mm, 8POS; MANF_P#: MANF_PART#; MANF: MANF; VALUE: HDRM_2X4
footprint HDRRS_M_2X4 (HEADER, 2.54mm, 2 Rows, Right Angle, Male, SMD)
pins: 1, 2, 3, 4, 5, 6, 7, 8

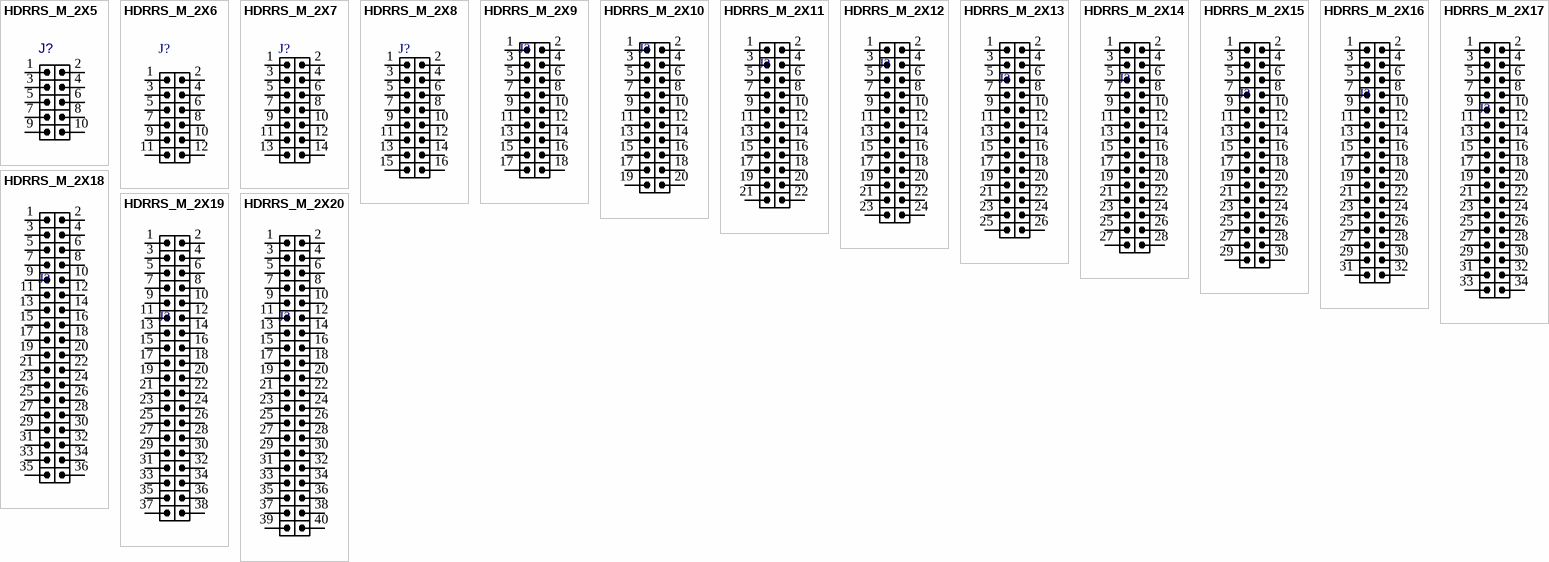
[diagram p8: symbols HDRRS_M_2X5 to HDRRS_M_2X20]

## HDRRS_M_2X5
designator J?, comment HDRM_2X5  (value not drawn)
CONN, HEADER, Male, pitch: 2.54mm, 10POS; VALUE: HDRM_2X5
footprint HDRRS_M_2X5 (HEADER, 2.54mm, 2 Rows, Right Angle, Male, SMD)
pins: 1, 2, 3, 4, 5, 6, 7, 8, 9, 10

## HDRRS_M_2X6
designator J?, comment HDRM_2X6  (value not drawn)
CONN, HEADER, Male, pitch: 2.54mm, 12POS; VALUE: HDRM_2X6
footprint HDRRS_M_2X6 (HEADER, 2.54mm, 2 Rows, Right Angle, Male, SMD)
pins: 1, 2, 3, 4, 5, 6, 7, 8, 9, 10, 11, 12

## HDRRS_M_2X7
designator J?, comment HDRM_2X7  (value not drawn)
CONN, HEADER, Male, pitch: 2.54mm, 14POS; VALUE: HDRM_2X7
footprint HDRRS_M_2X7 (HEADER, 2.54mm, 2 Rows, Right Angle, Male, SMD)
pins: 1, 2, 3, 4, 5, 6, 7, 8, 9, 10, 11, 12, 13, 14

## HDRRS_M_2X8
designator J?, comment HDRM_2X8  (value not drawn)
CONN, HEADER, Male, pitch: 2.54mm, 16POS; VALUE: HDRM_2X8
footprint HDRRS_M_2X8 (HEADER, 2.54mm, 2 Rows, Right Angle, Male, SMD)
pins: 1, 2, 3, 4, 5, 6, 7, 8, 9, 10, 11, 12, 13, 14, 15, 16

## HDRRS_M_2X9
designator J?, comment HDRM_2X9  (value not drawn)
CONN, HEADER, Male, pitch: 2.54mm, 18POS; VALUE: HDRM_2X9
footprint HDRRS_M_2X9 (HEADER, 2.54mm, 2 Rows, Right Angle, Male, SMD)
pins: 1, 2, 3, 4, 5, 6, 7, 8, 9, 10, 11, 12, 13, 14, 15, 16, 17, 18

## HDRRS_M_2X10
designator J?, comment HDRM_2X10  (value not drawn)
CONN, HEADER, Male, pitch: 2.54mm, 20POS; VALUE: HDRM_2X10
footprint HDRRS_M_2X10 (HEADER, 2.54mm, 2 Rows, Right Angle, Male, SMD)
pins: 1, 2, 3, 4, 5, 6, 7, 8, 9, 10, 11, 12, 13, 14, 15, 16, 17, 18, 19, 20

## HDRRS_M_2X11
designator J?, comment HDRM_2X11  (value not drawn)
CONN, HEADER, Male, pitch: 2.54mm, 22POS; VALUE: HDRM_2X11
footprint HDRRS_M_2X11 (HEADER, 2.54mm, 2 Rows, Right Angle, Male, SMD)
pins: 1, 2, 3, 4, 5, 6, 7, 8, 9, 10, 11, 12, 13, 14, 15, 16, 17, 18, 19, 20, 21, 22

## HDRRS_M_2X12
designator J?, comment HDRM_2X12  (value not drawn)
CONN, HEADER, Male, pitch: 2.54mm, 24POS; VALUE: HDRM_2X12
footprint HDRRS_M_2X12 (HEADER, 2.54mm, 2 Rows, Right Angle, Male, SMD)
pins: 1, 2, 3, 4, 5, 6, 7, 8, 9, 10, 11, 12, 13, 14, 15, 16, 17, 18, 19, 20, 21, 22, 23, 24

## HDRRS_M_2X13
designator J?, comment HDRM_2X13  (value not drawn)
CONN, HEADER, Male, pitch: 2.54mm, 26POS; VALUE: HDRM_2X13
footprint HDRRS_M_2X13 (HEADER, 2.54mm, 2 Rows, Right Angle, Male, SMD)
pins: 1, 2, 3, 4, 5, 6, 7, 8, 9, 10, 11, 12, 13, 14, 15, 16, 17, 18, 19, 20, 21, 22, 23, 24, 25, 26

## HDRRS_M_2X14
designator J?, comment HDRM_2X14  (value not drawn)
CONN, HEADER, Male, pitch: 2.54mm, 28POS; VALUE: HDRM_2X14
footprint HDRRS_M_2X14 (HEADER, 2.54mm, 2 Rows, Right Angle, Male, SMD)
pins: 1, 2, 3, 4, 5, 6, 7, 8, 9, 10, 11, 12, 13, 14, 15, 16, 17, 18, 19, 20, 21, 22, 23, 24, 25, 26, 27, 28

## HDRRS_M_2X15
designator J?, comment HDRM_2X15  (value not drawn)
CONN, HEADER, Male, pitch: 2.54mm, 30POS; VALUE: HDRM_2X15
footprint HDRRS_M_2X15 (HEADER, 2.54mm, 2 Rows, Right Angle, Male, SMD)
pins: 1, 2, 3, 4, 5, 6, 7, 8, 9, 10, 11, 12, 13, 14, 15, 16, 17, 18, 19, 20, 21, 22, 23, 24, 25, 26, 27, 28, 29, 30

## HDRRS_M_2X16
designator J?, comment HDRM_2X16  (value not drawn)
CONN, HEADER, Male, pitch: 2.54mm, 32POS; VALUE: HDRM_2X16
footprint HDRRS_M_2X16 (HEADER, 2.54mm, 2 Rows, Right Angle, Male, SMD)
pins: 1, 2, 3, 4, 5, 6, 7, 8, 9, 10, 11, 12, 13, 14, 15, 16, 17, 18, 19, 20, 21, 22, 23, 24, 25, 26, 27, 28, 29, 30, 31, 32

## HDRRS_M_2X17
designator J?, comment HDRM_2X17  (value not drawn)
CONN, HEADER, Male, pitch: 2.54mm, 34POS; VALUE: HDRM_2X17
footprint HDRRS_M_2X17 (HEADER, 2.54mm, 2 Rows, Right Angle, Male, SMD)
pins: 1, 2, 3, 4, 5, 6, 7, 8, 9, 10, 11, 12, 13, 14, 15, 16, 17, 18, 19, 20, 21, 22, 23, 24, 25, 26, 27, 28, 29, 30, 31, 32, 33, 34

## HDRRS_M_2X18
designator J?, comment HDRM_2X18  (value not drawn)
CONN, HEADER, Male, pitch: 2.54mm, 36POS; VALUE: HDRM_2X18
footprint HDRRS_M_2X18 (HEADER, 2.54mm, 2 Rows, Right Angle, Male, SMD)
pins: 1, 2, 3, 4, 5, 6, 7, 8, 9, 10, 11, 12, 13, 14, 15, 16, 17, 18, 19, 20, 21, 22, 23, 24, 25, 26, 27, 28, 29, 30, 31, 32, 33, 34, 35, 36

## HDRRS_M_2X19
designator J?, comment HDRM_2X19  (value not drawn)
CONN, HEADER, Male, pitch: 2.54mm, 38POS; VALUE: HDRM_2X19
footprint HDRRS_M_2X19 (HEADER, 2.54mm, 2 Rows, Right Angle, Male, SMD)
pins: 1, 2, 3, 4, 5, 6, 7, 8, 9, 10, 11, 12, 13, 14, 15, 16, 17, 18, 19, 20, 21, 22, 23, 24, 25, 26, 27, 28, 29, 30, 31, 32, 33, 34, 35, 36, 37, 38

## HDRRS_M_2X20
designator J?, comment HDRM_2X20  (value not drawn)
CONN, HEADER, Male, pitch: 2.54mm, 40POS; VALUE: HDRM_2X20
footprint HDRRS_M_2X20 (HEADER, 2.54mm, 2 Rows, Right Angle, Male, SMD)
pins: 1, 2, 3, 4, 5, 6, 7, 8, 9, 10, 11, 12, 13, 14, 15, 16, 17, 18, 19, 20, 21, 22, 23, 24, 25, 26, 27, 28, 29, 30, 31, 32, 33, 34, 35, 36, 37, 38, 39, 40


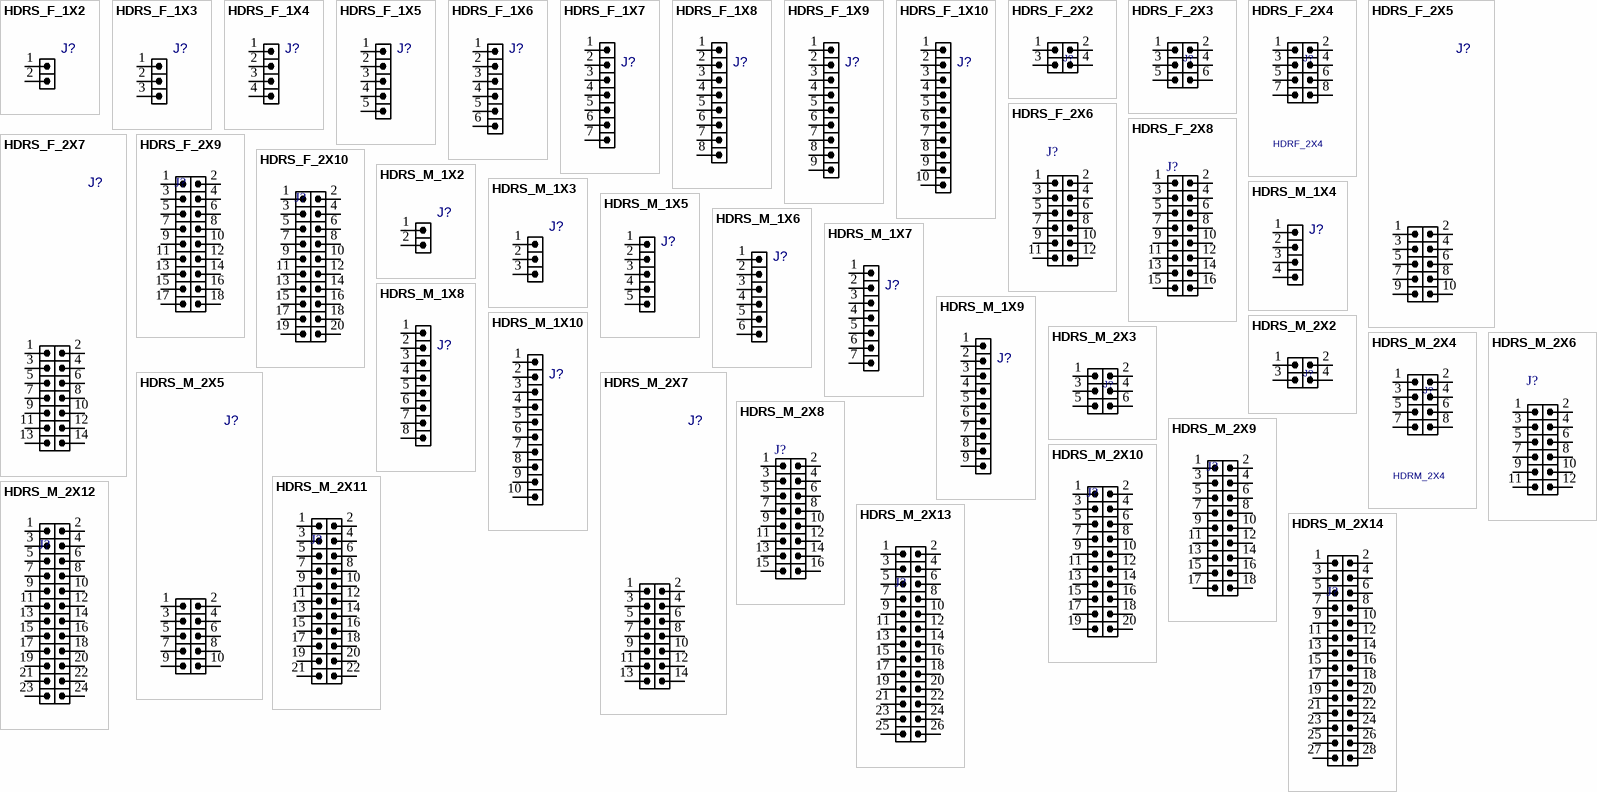
[diagram p9: symbols HDRS_F_1X2 to HDRS_M_2X14]

## HDRS_F_1X2
designator J?, comment HDRF2  (value not drawn)
CONN, HEADER, Female, pitch: 2.54mm, SMD; MANF: MOLEX; DESC: DESCRIPTION; ASSEMBLY: ASSEMBLY; PARAM: PARAM; PRICE: 0.5$; VALUE: HDRF2
footprint HDRS_F_1X2 (HEADER, 2.54mm pitch, straight, SMD)
pins: 1 P1, 2 P2

## HDRS_F_1X3
designator J?, comment HDRF3  (value not drawn)
CONN, HEADER, Female, pitch: 2.54mm, SMD; MANF: MOLEX; DESC: DESCRIPTION; ASSEMBLY: ASSEMBLY; PARAM: PARAM; PRICE: 0.5$; VALUE: HDRF3
footprint HDRS_F_1X3 (HEADER, 2.54mm pitch, straight, SMD)
pins: 1 P1, 2 P2, 3

## HDRS_F_1X4
designator J?, comment HDRF4  (value not drawn)
CONN, HEADER, Female, pitch: 2.54mm, SMD; MANF: MOLEX; DESC: DESCRIPTION; ASSEMBLY: ASSEMBLY; PARAM: PARAM; PRICE: 0.3$; VALUE: HDRF4
footprint HDRS_F_1X4 (HEADER, 2.54mm pitch, straight, SMD)
pins: 1, 2, 3, 4

## HDRS_F_1X5
designator J?, comment HDRF5  (value not drawn)
CONN, HEADER, Female, pitch: 2.54mm, SMD; MANF: Sullins; DESC: DESCRIPTION; ASSEMBLY: ASSEMBLY; PARAM: PARAM; PRICE: PRICE; VALUE: HDRF5
footprint HDRS_F_1X5 (HEADER, 2.54mm pitch, straight, SMD)
pins: 1, 2, 3, 4, 5

## HDRS_F_1X6
designator J?, comment HDRF6  (value not drawn)
CONN, HEADER, Female, pitch: 2.54mm, SMD; MANF: Sullins; DESC: DESCRIPTION; ASSEMBLY: ASSEMBLY; PARAM: PARAM; PRICE: PRICE; VALUE: HDRF6
footprint HDRS_F_1X6 (HEADER, 2.54mm pitch, straight, SMD)
pins: 1, 2, 3, 4, 5, 6

## HDRS_F_1X7
designator J?, comment HDRF7  (value not drawn)
CONN, HEADER, Female, pitch: 2.54mm, SMD; MANF: Sullins; DESC: DESCRIPTION; ASSEMBLY: ASSEMBLY; PARAM: PARAM; PRICE: PRICE; VALUE: HDRF7
footprint HDRS_F_1X7 (HEADER, 2.54mm pitch, straight, SMD)
pins: 1, 2, 3, 4, 5, 6, 7

## HDRS_F_1X8
designator J?, comment HDRF8  (value not drawn)
CONN, HEADER, Female, pitch: 2.54mm, SMD; MANF: Sullins; DESC: DESCRIPTION; ASSEMBLY: ASSEMBLY; PARAM: PARAM; PRICE: PRICE; VALUE: HDRF8
footprint HDRS_F_1X8 (HEADER, 2.54mm pitch, straight, SMD)
pins: 1, 2, 3, 4, 5, 6, 7, 8

## HDRS_F_1X9
designator J?, comment HDRF9  (value not drawn)
CONN, HEADER, Female, pitch: 2.54mm, SMD; MANF: Sullins; DESC: DESCRIPTION; ASSEMBLY: ASSEMBLY; PARAM: PARAM; PRICE: PRICE; VALUE: HDRF9
footprint HDRS_F_1X9 (HEADER, 2.54mm pitch, straight, SMD)
pins: 1, 2, 3, 4, 5, 6, 7, 8, 9

## HDRS_F_1X10
designator J?, comment HDRF10  (value not drawn)
CONN, HEADER, Female, pitch: 2.54mm, SMD; MANF: Sullins; DESC: DESCRIPTION; ASSEMBLY: ASSEMBLY; PARAM: PARAM; PRICE: PRICE; VALUE: HDRF10
footprint HDRS_F_1X10 (HEADER, 2.54mm pitch, straight, SMD)
pins: 1, 2, 3, 4, 5, 6, 7, 8, 9, 10

## HDRS_F_2X2
designator J?, comment HDRF_2X2  (value not drawn)
CONN, HEADER, Female, pitch: 2.54mm, SMD; MANF_P#: MANF_PART#; MANF: MANF; VALUE: HDRF_2X2
footprint HDRS_F_2X2 (HEADER, 2.54mm pitch, straight, SMD)
pins: 1, 2, 3, 4

## HDRS_F_2X3
designator J?, comment HDRF_2X3  (value not drawn)
CONN, HEADER, Female, pitch: 2.54mm, SMD; MANF_P#: MANF_PART#; MANF: MANF; VALUE: HDRF_2X3
footprint HDRS_F_2X3 (HEADER, 2.54mm pitch, straight, SMD)
pins: 1, 2, 3, 4, 5, 6

## HDRS_F_2X4
designator J?, comment HDRF_2X4
CONN, HEADER, Female, pitch: 2.54mm, SMD; MANF_P#: MANF_PART#; MANF: MANF; VALUE: HDRF_2X4
footprint HDRS_F_2X4 (HEADER, 2.54mm pitch, straight, SMD, TSM-105-01-X-DV-A)
pins: 1, 2, 3, 4, 5, 6, 7, 8

## HDRS_F_2X5
designator J?, comment HDRF_2X5  (value not drawn)
CONN, HEADER, Female, pitch: 2.54mm, SMD; MANF: Samtec; DESC: CONN HEADER .100 DUAL; MANF_P#: -; ASSEMBLY: ASSEMBLY; PARAM: PARAM; PRICE: PRICE; VALUE: HDRF_2X5
footprint HDRS_F_2X5 (HEADER, 2.54mm pitch, straight, SMD, TSM-105-01-X-DV-A)
pins: 1, 2, 3, 4, 5, 6, 7, 8, 9, 10

## HDRS_F_2X6
designator J?, comment HDRF_2X6  (value not drawn)
CONN, HEADER, Female, pitch: 2.54mm, SMD; VALUE: HDRF_2X6
footprint HDRS_F_2X6 (HEADER, 2.54mm pitch, straight, SMD)
pins: 1, 2, 3, 4, 5, 6, 7, 8, 9, 10, 11, 12

## HDRS_F_2X7
designator J?, comment HDRF_2X7  (value not drawn)
CONN, HEADER, Female, pitch: 2.54mm, SMD; MANF: Samtec; DESC: CONN HEADER .100 DUAL; ASSEMBLY: ASSEMBLY; PARAM: PARAM; PRICE: PRICE; VALUE: HDRF_2X7
footprint HDRS_F_2X7 (HEADER, 2.54mm pitch, straight, SMD)
pins: 1, 2, 3, 4, 5, 6, 7, 8, 9, 10, 11, 12, 13, 14

## HDRS_F_2X8
designator J?, comment HDRF_2X8  (value not drawn)
CONN, HEADER, Female, pitch: 2.54mm, SMD; VALUE: HDRF_2X8
footprint HDRS_F_2X8 (HEADER, 2.54mm pitch, straight, SMD)
pins: 1, 2, 3, 4, 5, 6, 7, 8, 9, 10, 11, 12, 13, 14, 15, 16

## HDRS_F_2X9
designator J?, comment HDRF_2X9  (value not drawn)
CONN, HEADER, Female, pitch: 2.54mm, SMD; VALUE: HDRF_2X9
footprint HDRS_F_2X9 (HEADER, 2.54mm pitch, straight, SMD)
pins: 1, 2, 3, 4, 5, 6, 7, 8, 9, 10, 11, 12, 13, 14, 15, 16, 17, 18

## HDRS_F_2X10
designator J?, comment HDRF_2X10  (value not drawn)
CONN, HEADER, Female, pitch: 2.54mm, SMD; VALUE: HDRF_2X10
footprint HDRS_F_2X10 (HEADER, 2.54mm pitch, straight, SMD)
pins: 1, 2, 3, 4, 5, 6, 7, 8, 9, 10, 11, 12, 13, 14, 15, 16, 17, 18, 19, 20

## HDRS_M_1X2
designator J?, comment HDRM2  (value not drawn)
CONN, HEADER, Male, pitch: 2.54mm, 2POS, SMD; MANF_P#: 87898-0204; MANF: MOLEX; DESC: DESCRIPTION; ASSEMBLY: ASSEMBLY; PARAM: PARAM; PRICE: 0.5$; VALUE: HDRM2
footprint HDRS_M_1X2
pins: 1 P1, 2 P2

## HDRS_M_1X3
designator J?, comment HDRM3  (value not drawn)
CONN, HEADER, Male, pitch: 2.54mm, 3POS, SMD; MANF_P#: 87898-0304; MANF: MOLEX; DESC: DESCRIPTION; ASSEMBLY: ASSEMBLY; PARAM: PARAM; PRICE: 0.5$; VALUE: HDRM3
footprint HDRS_M_1X3 (Connector; Header; 3 Position, SMD)
pins: 1 P1, 2 P2, 3

## HDRS_M_1X4
designator J?, comment HDRM4  (value not drawn)
CONN, HEADER, Male, pitch: 2.54mm, 4POS, SMD; MANF_P#: 87898-0426; MANF: MOLEX; DESC: DESCRIPTION; ASSEMBLY: ASSEMBLY; PARAM: PARAM; PRICE: 0.3$; VALUE: HDRM4
footprint HDRS_M_1X4 (Connector; Header; 4 Position, SMD)
pins: 1, 2, 3, 4

## HDRS_M_1X5
designator J?, comment HDRM5  (value not drawn)
CONN, HEADER, Male, pitch: 2.54mm, 5POS, SMD; MANF_P#: PBC36SAAN; MANF: Sullins; DESC: DESCRIPTION; ASSEMBLY: ASSEMBLY; PARAM: PARAM; PRICE: PRICE; VALUE: HDRM5
footprint HDRS_M_1X5 (Connector; Header; 5 Position, SMD)
pins: 1, 2, 3, 4, 5

## HDRS_M_1X6
designator J?, comment HDRM6  (value not drawn)
CONN, HEADER, Male, pitch: 2.54mm, 6POS, SMD; MANF_P#: PBC36SAAN; MANF: Sullins; DESC: DESCRIPTION; ASSEMBLY: ASSEMBLY; PARAM: PARAM; PRICE: PRICE; VALUE: HDRM6
footprint HDRS_M_1X6 (Connector; Header; 6 Position, SMD)
pins: 1, 2, 3, 4, 5, 6

## HDRS_M_1X7
designator J?, comment HDRM7  (value not drawn)
CONN, HEADER, Male, pitch: 2.54mm, 7POS, SMD; MANF_P#: PBC36SAAN; MANF: Sullins; DESC: DESCRIPTION; ASSEMBLY: ASSEMBLY; PARAM: PARAM; PRICE: PRICE; VALUE: HDRM7
footprint HDRS_M_1X7 (Connector; Header; 7 Position, SMD)
pins: 1, 2, 3, 4, 5, 6, 7

## HDRS_M_1X8
designator J?, comment HDRM8  (value not drawn)
CONN, HEADER, Male, pitch: 2.54mm, 8POS, SMD; MANF_P#: PBC36SAAN; MANF: Sullins; DESC: DESCRIPTION; ASSEMBLY: ASSEMBLY; PARAM: PARAM; PRICE: PRICE; VALUE: HDRM8
footprint HDRS_M_1X8 (Connector; Header; 8 Position, SMD)
pins: 1, 2, 3, 4, 5, 6, 7, 8

## HDRS_M_1X9
designator J?, comment HDRM9  (value not drawn)
CONN, HEADER, Male, pitch: 2.54mm, SMD; MANF_P#: PBC36SAAN; MANF: Sullins; DESC: DESCRIPTION; ASSEMBLY: ASSEMBLY; PARAM: PARAM; PRICE: PRICE; VALUE: HDRM9
footprint HDRS_M_1X9 (HEADER, 2.54mm pitch, straight, SMD)
pins: 1, 2, 3, 4, 5, 6, 7, 8, 9

## HDRS_M_1X10
designator J?, comment HDRM10  (value not drawn)
CONN, HEADER, Male, pitch: 2.54mm, SMD; MANF_P#: PBC36SAAN; MANF: Sullins; DESC: DESCRIPTION; ASSEMBLY: ASSEMBLY; PARAM: PARAM; PRICE: PRICE; VALUE: HDRM10
footprint HDRS_M_1X10 (HEADER, 2.54mm pitch, straight, SMD)
pins: 1, 2, 3, 4, 5, 6, 7, 8, 9, 10

## HDRS_M_2X2
designator J?, comment HDRM_2X2  (value not drawn)
CONN, HEADER, Male, pitch: 2.54mm, 4POS, SMD; MANF_P#: MANF_PART#; MANF: MANF; VALUE: HDRM_2X2
footprint HDRS_M_2X2
pins: 1, 2, 3, 4

## HDRS_M_2X3
designator J?, comment HDRM_2X3  (value not drawn)
CONN, HEADER, Male, pitch: 2.54mm, 6POS, SMD; MANF_P#: MANF_PART#; MANF: MANF; VALUE: HDRM_2X3
footprint HDRS_M_2X3 (Connector; Header; 3x2 Position, SMD)
pins: 1, 2, 3, 4, 5, 6

## HDRS_M_2X4
designator J?, comment HDRM_2X4
CONN, HEADER, Male, pitch: 2.54mm, 8POS; MANF_P#: MANF_PART#; MANF: MANF; VALUE: HDRM_2X4
footprint HDRS_M_2X4 (HEADER, 2.54mm pitch, straight, SMD, TSM-105-01-X-DV-A)
pins: 1, 2, 3, 4, 5, 6, 7, 8

## HDRS_M_2X5
designator J?, comment HDRM_2X5  (value not drawn)
CONN, HEADER, Male, pitch: 2.54mm, 10POS, SMD; MANF: Samtec; DESC: CONN HEADER .100 DUAL; MANF_P#: -; ASSEMBLY: ASSEMBLY; PARAM: PARAM; PRICE: PRICE; VALUE: HDRM_2X5
footprint HDRS_M_2X5 (Male Header 2X05 with 2.54 mm SMD, TSM-105-01-X-DV-A)
footprint HDRS_M_2X5_C (Footprint not found)
pins: 1, 2, 3, 4, 5, 6, 7, 8, 9, 10

## HDRS_M_2X6
designator J?, comment HDRM_2X6  (value not drawn)
CONN, HEADER, Male, pitch: 2.54mm, 12POS; VALUE: HDRM_2X6
footprint HDRS_M_2X6 (HEADER, 2.54mm pitch, straight, SMD)
pins: 1, 2, 3, 4, 5, 6, 7, 8, 9, 10, 11, 12

## HDRS_M_2X7
designator J?, comment HDRM_2X7  (value not drawn)
CONN, HEADER, Male, pitch: 2.54mm, 14POS, SMD; MANF_P#: MTLW-107-07-G-D-265; MANF: Samtec; DESC: CONN HEADER .100 DUAL; ASSEMBLY: ASSEMBLY; PARAM: PARAM; PRICE: PRICE; VALUE: HDRM_2X7
footprint HDRS_M_2X7
pins: 1, 2, 3, 4, 5, 6, 7, 8, 9, 10, 11, 12, 13, 14

## HDRS_M_2X8
designator J?, comment HDRM_2X8  (value not drawn)
CONN, HEADER, Male, pitch: 2.54mm, 16POS; VALUE: HDRM_2X8
footprint HDRS_M_2X8 (HEADER, 2.54mm pitch, straight, SMD)
pins: 1, 2, 3, 4, 5, 6, 7, 8, 9, 10, 11, 12, 13, 14, 15, 16

## HDRS_M_2X9
designator J?, comment HDRM_2X9  (value not drawn)
CONN, HEADER, Male, pitch: 2.54mm, 18POS; VALUE: HDRM_2X9
footprint HDRS_M_2X9 (HEADER, 2.54mm pitch, straight, SMD)
pins: 1, 2, 3, 4, 5, 6, 7, 8, 9, 10, 11, 12, 13, 14, 15, 16, 17, 18

## HDRS_M_2X10
designator J?, comment HDRM_2X10  (value not drawn)
CONN, HEADER, Male, pitch: 2.54mm, 20POS; VALUE: HDRM_2X10
footprint HDRS_M_2X10 (HEADER, 2.54mm pitch, straight, SMD)
pins: 1, 2, 3, 4, 5, 6, 7, 8, 9, 10, 11, 12, 13, 14, 15, 16, 17, 18, 19, 20

## HDRS_M_2X11
designator J?, comment HDRM_2X11  (value not drawn)
CONN, HEADER, Male, pitch: 2.54mm, 22POS; VALUE: HDRM_2X11
footprint HDRS_M_2X11 (HEADER, 2.54mm pitch, straight, SMD)
pins: 1, 2, 3, 4, 5, 6, 7, 8, 9, 10, 11, 12, 13, 14, 15, 16, 17, 18, 19, 20, 21, 22

## HDRS_M_2X12
designator J?, comment HDRM_2X12  (value not drawn)
CONN, HEADER, Male, pitch: 2.54mm, 24POS; VALUE: HDRM_2X12
footprint HDRS_M_2X12 (HEADER, 2.54mm pitch, straight, SMD)
pins: 1, 2, 3, 4, 5, 6, 7, 8, 9, 10, 11, 12, 13, 14, 15, 16, 17, 18, 19, 20, 21, 22, 23, 24

## HDRS_M_2X13
designator J?, comment HDRM_2X13  (value not drawn)
CONN, HEADER, Male, pitch: 2.54mm, 26POS; VALUE: HDRM_2X13
footprint HDRS_M_2X13 (HEADER, 2.54mm pitch, straight, SMD)
pins: 1, 2, 3, 4, 5, 6, 7, 8, 9, 10, 11, 12, 13, 14, 15, 16, 17, 18, 19, 20, 21, 22, 23, 24, 25, 26

## HDRS_M_2X14
designator J?, comment HDRM_2X14  (value not drawn)
CONN, HEADER, Male, pitch: 2.54mm, 28POS; VALUE: HDRM_2X14
footprint HDRS_M_2X14 (HEADER, 2.54mm pitch, straight, SMD)
pins: 1, 2, 3, 4, 5, 6, 7, 8, 9, 10, 11, 12, 13, 14, 15, 16, 17, 18, 19, 20, 21, 22, 23, 24, 25, 26, 27, 28

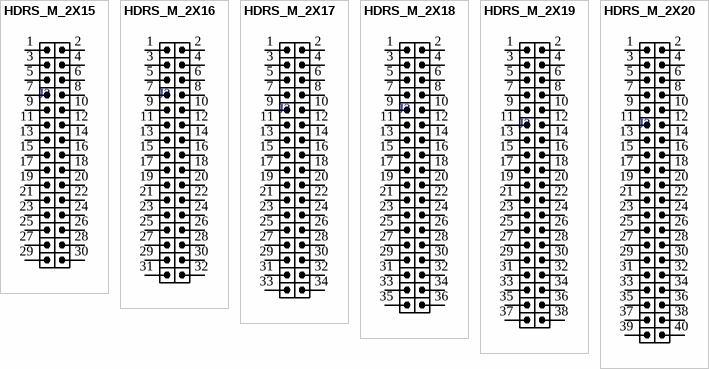
[diagram p10: symbols HDRS_M_2X15 to HDRS_M_2X20]

## HDRS_M_2X15
designator J?, comment HDRM_2X15  (value not drawn)
CONN, HEADER, Male, pitch: 2.54mm, 30POS; VALUE: HDRM_2X15
footprint HDRS_M_2X15 (HEADER, 2.54mm pitch, straight, SMD)
pins: 1, 2, 3, 4, 5, 6, 7, 8, 9, 10, 11, 12, 13, 14, 15, 16, 17, 18, 19, 20, 21, 22, 23, 24, 25, 26, 27, 28, 29, 30

## HDRS_M_2X16
designator J?, comment HDRM_2X16  (value not drawn)
CONN, HEADER, Male, pitch: 2.54mm, 32POS; VALUE: HDRM_2X16
footprint HDRS_M_2X16 (HEADER, 2.54mm pitch, straight, SMD)
pins: 1, 2, 3, 4, 5, 6, 7, 8, 9, 10, 11, 12, 13, 14, 15, 16, 17, 18, 19, 20, 21, 22, 23, 24, 25, 26, 27, 28, 29, 30, 31, 32

## HDRS_M_2X17
designator J?, comment HDRM_2X17  (value not drawn)
CONN, HEADER, Male, pitch: 2.54mm, 34POS; VALUE: HDRM_2X17
footprint HDRS_M_2X17 (HEADER, 2.54mm pitch, straight, SMD)
pins: 1, 2, 3, 4, 5, 6, 7, 8, 9, 10, 11, 12, 13, 14, 15, 16, 17, 18, 19, 20, 21, 22, 23, 24, 25, 26, 27, 28, 29, 30, 31, 32, 33, 34

## HDRS_M_2X18
designator J?, comment HDRM_2X18  (value not drawn)
CONN, HEADER, Male, pitch: 2.54mm, 36POS; VALUE: HDRM_2X18
footprint HDRS_M_2X18 (HEADER, 2.54mm pitch, straight, SMD)
pins: 1, 2, 3, 4, 5, 6, 7, 8, 9, 10, 11, 12, 13, 14, 15, 16, 17, 18, 19, 20, 21, 22, 23, 24, 25, 26, 27, 28, 29, 30, 31, 32, 33, 34, 35, 36

## HDRS_M_2X19
designator J?, comment HDRM_2X19  (value not drawn)
CONN, HEADER, Male, pitch: 2.54mm, 38POS; VALUE: HDRM_2X19
footprint HDRS_M_2X19 (HEADER, 2.54mm pitch, straight, SMD)
pins: 1, 2, 3, 4, 5, 6, 7, 8, 9, 10, 11, 12, 13, 14, 15, 16, 17, 18, 19, 20, 21, 22, 23, 24, 25, 26, 27, 28, 29, 30, 31, 32, 33, 34, 35, 36, 37, 38

## HDRS_M_2X20
designator J?, comment HDRM_2X20  (value not drawn)
CONN, HEADER, Male, pitch: 2.54mm, 40POS; VALUE: HDRM_2X20
footprint HDRS_M_2X20 (HEADER, 2.54mm pitch, straight, SMD)
pins: 1, 2, 3, 4, 5, 6, 7, 8, 9, 10, 11, 12, 13, 14, 15, 16, 17, 18, 19, 20, 21, 22, 23, 24, 25, 26, 27, 28, 29, 30, 31, 32, 33, 34, 35, 36, 37, 38, 39, 40


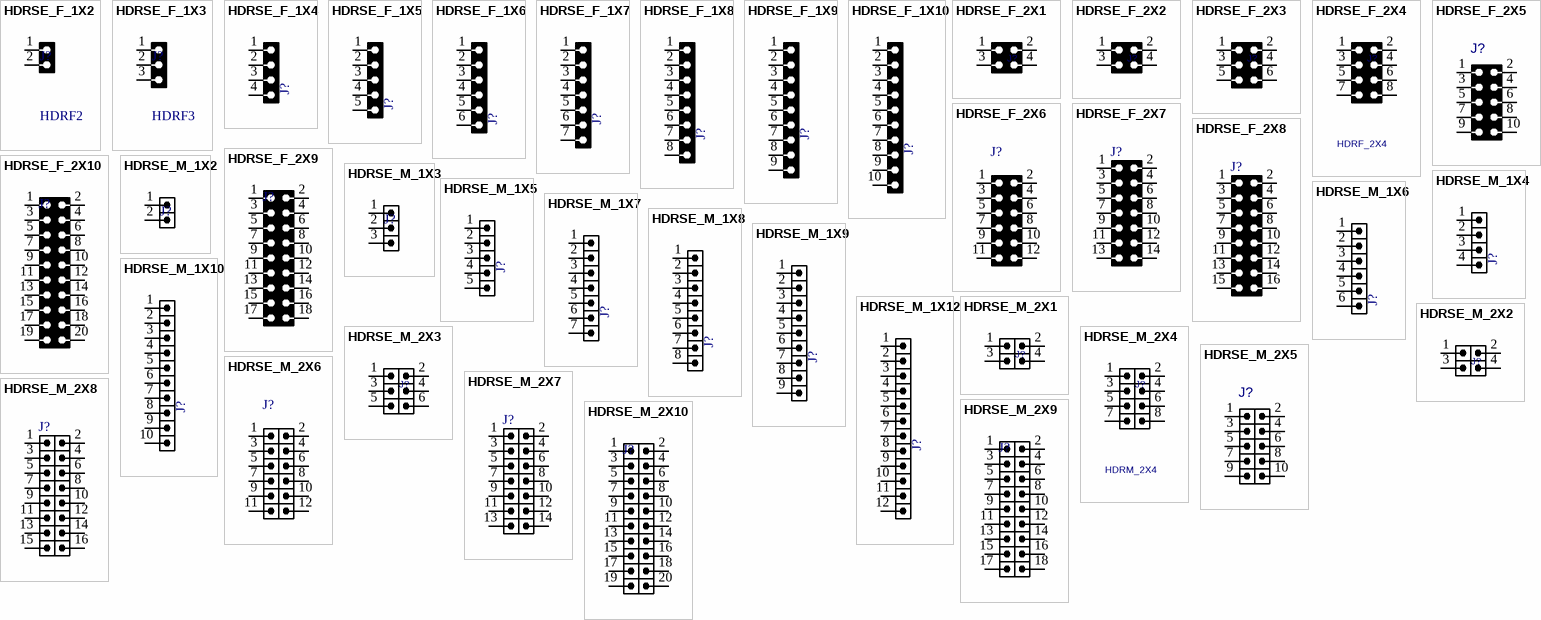
[diagram p11: symbols HDRSE_F_1X2 to HDRSE_M_2X10]

## HDRSE_F_1X2
designator J?, comment HDRF2
CONN, HEADER, Female, pitch: 2.54mm, 2POS; VALUE: HDRF2
footprint HDRSE_F_1X2 (Connector; Header; 2 Position, SMD edge)
pins: 1, 2

## HDRSE_F_1X3
designator J?, comment HDRF3
CONN, HEADER, Female, pitch: 2.54mm, 3POS; VALUE: HDRF3
footprint HDRSE_F_1X3 (Connector; Header; 3 Position)
pins: 1, 2, 3

## HDRSE_F_1X4
designator J?, comment HDRF4  (value not drawn)
CONN, HEADER, Female, pitch: 2.54mm, 4POS; VALUE: HDRF4
footprint HDRSE_F_1X4 (Connector; Header; 4 Position)
pins: 1, 2, 3, 4

## HDRSE_F_1X5
designator J?, comment HDRF5  (value not drawn)
CONN, HEADER, Female, pitch: 2.54mm, 5POS; VALUE: HDRF5
footprint HDRSE_F_1X5 (Connector; Header; 5 Position)
pins: 1, 2, 3, 4, 5

## HDRSE_F_1X6
designator J?, comment HDRF6  (value not drawn)
CONN, HEADER, Female, pitch: 2.54mm, 6POS; VALUE: HDRF6
footprint HDRSE_F_1X6 (Connector; Header; 6 Position)
pins: 1, 2, 3, 4, 5, 6

## HDRSE_F_1X7
designator J?, comment HDRF7  (value not drawn)
CONN, HEADER, Female, pitch: 2.54mm, 7POS; VALUE: HDRF7
footprint HDRSE_F_1X7 (Connector; Header; 7 Position)
pins: 1, 2, 3, 4, 5, 6, 7

## HDRSE_F_1X8
designator J?, comment HDRF8  (value not drawn)
CONN, HEADER, Female, pitch: 2.54mm, 8POS; VALUE: HDRF8
footprint HDRSE_F_1X8 (Connector; Header; 8 Position)
pins: 1, 2, 3, 4, 5, 6, 7, 8

## HDRSE_F_1X9
designator J?, comment HDRF9  (value not drawn)
CONN, HEADER, Female, pitch: 2.54mm, 9POS; VALUE: HDRF9
footprint HDRSE_F_1X9 (Connector; Header; 9 Position)
pins: 1, 2, 3, 4, 5, 6, 7, 8, 9

## HDRSE_F_1X10
designator J?, comment HDRF10  (value not drawn)
CONN, HEADER, Female, pitch: 2.54mm, 10POS; VALUE: HDRF10
footprint HDRSE_F_1X10 (Connector; Header; 10 Position)
pins: 1, 2, 3, 4, 5, 6, 7, 8, 9, 10

## HDRSE_F_2X1
designator J?, comment HDRF_2X1  (value not drawn)
CONN, HEADER, Female, pitch: 2.54mm, 2POS; MANF_P#: MANF_PART#; MANF: MANF; VALUE: HDRF_2X1
footprint HDRSE_F_2X1 (Connector; Header; 2x1 Position)
pins: 1, 2, 3, 4

## HDRSE_F_2X2
designator J?, comment HDRF_2X2  (value not drawn)
CONN, HEADER, Female, pitch: 2.54mm, 4POS; MANF_P#: MANF_PART#; MANF: MANF; VALUE: HDRF_2X2
footprint HDRSE_F_2X2 (Connector; Header; 2x2 Position)
pins: 1, 2, 3, 4

## HDRSE_F_2X3
designator J?, comment HDRF_2X3  (value not drawn)
CONN, HEADER, Female, pitch: 2.54mm, 6POS; MANF_P#: MANF_PART#; MANF: MANF; VALUE: HDRF_2X3
footprint HDRSE_F_2X3 (Connector; Header; 3x2 Position)
pins: 1, 2, 3, 4, 5, 6

## HDRSE_F_2X4
designator J?, comment HDRF_2X4
CONN, HEADER, Female, pitch: 2.54mm, 8POS; MANF_P#: MANF_PART#; MANF: MANF; VALUE: HDRF_2X4
footprint HDRSE_F_2X4 (Male Header 2X04 with 2.54 mm Pitch)
pins: 1, 2, 3, 4, 5, 6, 7, 8

## HDRSE_F_2X5
designator J?, comment HDRF_2X5  (value not drawn)
CONN, HEADER, Female, pitch: 2.54mm, 10POS; VALUE: HDRF_2X5
footprint HDRSE_F_2X5 (Male Header 2X05 with 2.54 mm Pitch)
pins: 1, 2, 3, 4, 5, 6, 7, 8, 9, 10

## HDRSE_F_2X6
designator J?, comment HDRF_2X6  (value not drawn)
CONN, HEADER, Female, pitch: 2.54mm, 12POS; VALUE: HDRF_2X6
footprint HDRSE_F_2X6 (Male Header 2X06 with 2.54 mm Pitch)
pins: 1, 2, 3, 4, 5, 6, 7, 8, 9, 10, 11, 12

## HDRSE_F_2X7
designator J?, comment HDRF_2X7  (value not drawn)
CONN, HEADER, Female, pitch: 2.54mm, 14POS; VALUE: HDRF_2X7
footprint HDRSE_F_2X7 (Male Header 2X07 with 2.54 mm Pitch)
pins: 1, 2, 3, 4, 5, 6, 7, 8, 9, 10, 11, 12, 13, 14

## HDRSE_F_2X8
designator J?, comment HDRF_2X8  (value not drawn)
CONN, HEADER, Female, pitch: 2.54mm, 16POS; VALUE: HDRF_2X8
footprint HDRSE_F_2X8 (Male Header 2X08 with 2.54 mm Pitch)
pins: 1, 2, 3, 4, 5, 6, 7, 8, 9, 10, 11, 12, 13, 14, 15, 16

## HDRSE_F_2X9
designator J?, comment HDRF_2X9  (value not drawn)
CONN, HEADER, Female, pitch: 2.54mm, 18POS; VALUE: HDRF_2X9
footprint HDRSE_F_2X9 (Male Header 2X09 with 2.54 mm Pitch)
pins: 1, 2, 3, 4, 5, 6, 7, 8, 9, 10, 11, 12, 13, 14, 15, 16, 17, 18

## HDRSE_F_2X10
designator J?, comment HDRF_2X10  (value not drawn)
CONN, HEADER, Female, pitch: 2.54mm, 20POS; VALUE: HDRF_2X10
footprint HDRSE_F_2X10 (Male Header 2X10 with 2.54 mm Pitch)
pins: 1, 2, 3, 4, 5, 6, 7, 8, 9, 10, 11, 12, 13, 14, 15, 16, 17, 18, 19, 20

## HDRSE_M_1X2
designator J?, comment HDRM2  (value not drawn)
CONN, HEADER, Male, pitch: 2.54mm, 2POS; VALUE: HDRM2
footprint HDRSE_M_1X2 (Connector; Header; 2 Position, SMD edge)
pins: 1, 2

## HDRSE_M_1X3
designator J?, comment HDRM3  (value not drawn)
CONN, HEADER, Male, pitch: 2.54mm, 3POS; VALUE: HDRM3
footprint HDRSE_M_1X3 (Connector; Header; 3 Position)
pins: 1, 2, 3

## HDRSE_M_1X4
designator J?, comment HDR1X4  (value not drawn)
CONN, HEADER, Male, pitch: 2.54mm, 4POS; VALUE: HDRM4
footprint HDRSE_M_1X4 (Connector; Header; 4 Position)
pins: 1, 2, 3, 4

## HDRSE_M_1X5
designator J?, comment HDR1X5  (value not drawn)
CONN, HEADER, Male, pitch: 2.54mm, 5POS; VALUE: HDRM5
footprint HDRSE_M_1X5 (Connector; Header; 5 Position)
pins: 1, 2, 3, 4, 5

## HDRSE_M_1X6
designator J?, comment HDR1X6  (value not drawn)
CONN, HEADER, Male, pitch: 2.54mm, 6POS; VALUE: HDRM6
footprint HDRSE_M_1X6 (Connector; Header; 6 Position)
pins: 1, 2, 3, 4, 5, 6

## HDRSE_M_1X7
designator J?, comment HDR1X7  (value not drawn)
CONN, HEADER, Male, pitch: 2.54mm, 7POS; VALUE: HDRM7
footprint HDRSE_M_1X7 (Connector; Header; 7 Position)
pins: 1, 2, 3, 4, 5, 6, 7

## HDRSE_M_1X8
designator J?, comment HDR1X8  (value not drawn)
CONN, HEADER, Male, pitch: 2.54mm, 8POS; VALUE: HDRM8
footprint HDRSE_M_1X8 (Connector; Header; 8 Position)
pins: 1, 2, 3, 4, 5, 6, 7, 8

## HDRSE_M_1X9
designator J?, comment HDR1X9  (value not drawn)
CONN, HEADER, Male, pitch: 2.54mm, 9POS; VALUE: HDRM9
footprint HDRSE_M_1X9 (Connector; Header; 9 Position)
pins: 1, 2, 3, 4, 5, 6, 7, 8, 9

## HDRSE_M_1X10
designator J?, comment HDR1X10  (value not drawn)
CONN, HEADER, Male, pitch: 2.54mm, 10POS; VALUE: HDRM10
footprint HDRSE_M_1X10 (Connector; Header; 10 Position)
pins: 1, 2, 3, 4, 5, 6, 7, 8, 9, 10

## HDRSE_M_1X12
designator J?, comment HDR1X10  (value not drawn)
CONN, HEADER, Male, pitch: 2.54mm, 12POS; VALUE: HDRM12
footprint HDRSE_M_1X12 (Connector; Header; 12 Position)
pins: 1, 2, 3, 4, 5, 6, 7, 8, 9, 10, 11, 12

## HDRSE_M_2X1
designator J?, comment HDRM_2X1  (value not drawn)
CONN, HEADER, Male, pitch: 2.54mm, 2POS; MANF_P#: MANF_PART#; MANF: MANF; VALUE: HDRM_2X1
footprint HDRSE_M_2X1 (Connector; Header; 2x1 Position)
pins: 1, 2, 3, 4

## HDRSE_M_2X2
designator J?, comment HDRM_2X2  (value not drawn)
CONN, HEADER, Male, pitch: 2.54mm, 4POS; MANF_P#: MANF_PART#; MANF: MANF; VALUE: HDRM_2X2
footprint HDRSE_M_2X2 (Connector; Header; 2x2 Position)
pins: 1, 2, 3, 4